# Altium schematic symbol library Altium_Lib_Haris.SchLib: 265 symbols (part 1 of 2)
Pins are listed as number, name and electrical type; pins without a type are passive.

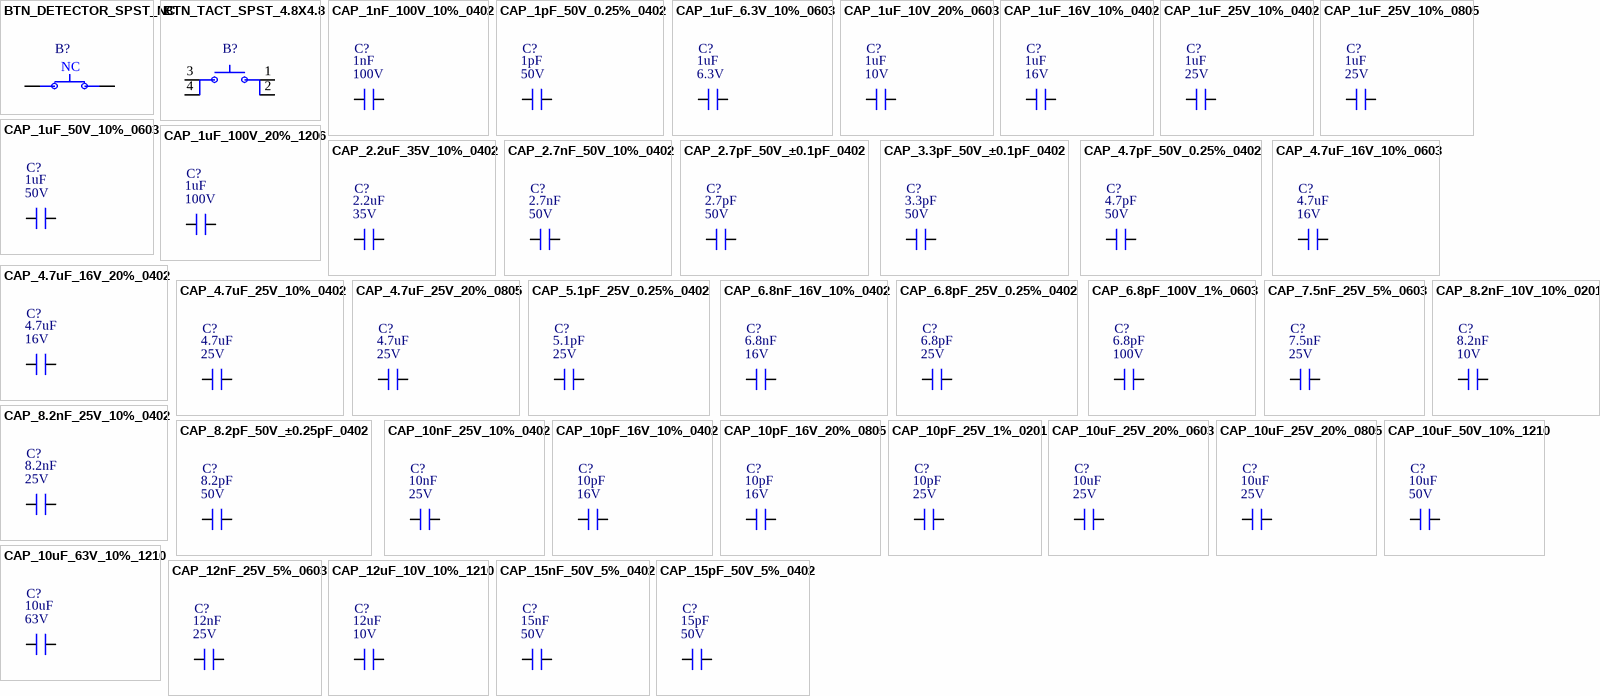
[diagram p0: symbols BTN_DETECTOR_SPST_NC to CAP_15pF_50V_5%_0402]

## BTN_DETECTOR_SPST_NC
designator B?, comment DTS 111 BBP T  (value not drawn)
DECTECTOR SWITCH, ON-OFF, TOP AC; Manufacturer: Knitter-Switch; Manufacturer Part Number: DTS 111 BBP T; Supplier: Digikey; Supplier Part Number: 3746-DTS111BBPTTR-ND
pins: 1, 2
text: NC

## BTN_TACT_SPST_4.8X4.8
designator B?, comment PTS526SK15SMTR2 LFS  (value not drawn)
Tactile Switch SPST-NO Top Actuated Surface Mount; Manufacturer: C&K; Manufacturer Part Number: PTS526SK15SMTR2 LFS; Supplier: Digikey; Supplier Part Number: CKN12221-2-ND; Case/Package: 5.20mm x 5.20mm
pins: 1, 2, 3, 4

## CAP_1nF_100V_10%_0402
designator C?, comment 1nF  Voltage: 100V
CAP CER 1000PF 100V X7R 0402; Manufacturer: Murata Electronics; Manufacturer Part Number: GRM155R72A102KA01D; Supplier: Digikey; Supplier Part Number: 490-6366-2-ND; Case/Package: 0402; Value: 1nF
footprint CAP_0402 (Ceramic Capacitor)
pins: 1, 2

## CAP_1pF_50V_0.25%_0402
designator C?, comment 1pF  Voltage: 50V
CAP CER 1PF 50V C0G/NP0 0402; Manufacturer: Murata Electronics; Manufacturer Part Number: GRM1555C1H1R0CA01D; Supplier: Digikey; Supplier Part Number: 490-3199-2-ND; Case/Package: 0402; Value: 1pF
footprint CAP_0402 (Ceramic Capacitor)
pins: 1, 2

## CAP_1uF_6.3V_10%_0603
designator C?, comment 1uF  Voltage: 6.3V
CAP CER 1UF 6.3V X5R 0603; Manufacturer: Murata Electronics; Manufacturer Part Number: GRM188R60J105KA01D; Supplier: Digikey; Supplier Part Number: 490-1550-2-ND; Case/Package: 0603; Value: 1uF
footprint CAP_0603 (Ceramic Capacitor)
pins: 1, 2

## CAP_1uF_10V_20%_0603
designator C?, comment 1uF  Voltage: 10V
CAP CER 1UF 10V Y5V 0603; Manufacturer: KEMET; Manufacturer Part Number: C0603C105Z8VACTU; Supplier: Digikey; Supplier Part Number: 399-C0603C105Z8VACTUTR-ND; Case/Package: 0603; Value: 1uF
footprint CAP_0603 (Ceramic Capacitor)
pins: 1, 2

## CAP_1uF_16V_10%_0402
designator C?, comment 1uF  Voltage: 16V
CAP CER 1UF 16V X5R 0402; Manufacturer: Samsung Electro-Mechanics; Manufacturer Part Number: CL05A105KO5NNNC; Supplier: Digikey; Supplier Part Number: 1276-1067-2-ND; Case/Package: 0402; Value: 1uF
footprint CAP_0402 (Ceramic Capacitor)
pins: 1, 2

## CAP_1uF_25V_10%_0402
designator C?, comment 1uF  Voltage: 25V
CAP CER 1UF 25V X5R 0402; Manufacturer: TDK; Manufacturer Part Number: C1005X5R1E105K050BC; Supplier: Digikey; Supplier Part Number: 445-9066-2-ND; Case/Package: 0402; Value: 1uF
footprint CAP_0402 (Ceramic Capacitor)
pins: 1, 2

## CAP_1uF_25V_10%_0805
designator C?, comment 1uF  Voltage: 25V
CAP CER 1UF 25V X7R 0805; Manufacturer: Murata Electronics; Manufacturer Part Number: GRM219R71E105KA88D; Supplier: Digikey; Supplier Part Number: 490-5899-2-ND; Case/Package: 0805; Value: 1uF
footprint CAP_0805 (Ceramic Capacitor)
pins: 1, 2

## CAP_1uF_50V_10%_0603
designator C?, comment 1uF  Voltage: 50V
CAP CER 1UF 50V X5R 0603; Manufacturer: TDK; Manufacturer Part Number: C1608X5R1H105K080AB; Supplier: Digikey; Supplier Part Number: 445-7468-2-ND; Case/Package: 0603; Value: 1uF
footprint CAP_0603 (Ceramic Capacitor)
pins: 1, 2

## CAP_1uF_100V_20%_1206
designator C?, comment 1uF  Voltage: 100V
CAP CER 1UF 100V X7R 1206; Manufacturer: TDK; Manufacturer Part Number: C3216X7R2A105M160AA; Supplier: Digikey; Supplier Part Number: 445-4468-2-ND; Case/Package: 1206; Value: 1uF
footprint CAP_1206 (Ceramic Capacitor)
pins: 1, 2

## CAP_2.2uF_35V_10%_0402
designator C?, comment 2.2uF  Voltage: 35V
CAP CER 2.2UF 35V X5R 0402; Manufacturer: TDK; Manufacturer Part Number: C1005X5R1V225K050BC; Supplier: Digikey; Supplier Part Number: 445-9028-2-ND; Case/Package: 0402; Value: 2.2uF
footprint CAP_0402 (Ceramic Capacitor)
pins: 1, 2

## CAP_2.7nF_50V_10%_0402
designator C?, comment 2.7nF  Voltage: 50V
CAP CER 2700PF 50V X7R 0402; Manufacturer: Murata Electronics; Manufacturer Part Number: GRM155R71H272KA01D; Supplier: Digikey; Supplier Part Number: 490-1306-2-ND; Case/Package: 0402; Value: 2.7nF
footprint CAP_0402 (Ceramic Capacitor)
pins: 1, 2

## CAP_2.7pF_50V_±0.1pF_0402
designator C?, comment 2.7pF  Voltage: 50V
CAP CER 2.7PF 50V C0G/NP0 0402; Manufacturer: Murata Electronics; Manufacturer Part Number: GJM1555C1H2R7BB01D; Supplier: Digikey; Supplier Part Number: 490-8094-2-ND; Case/Package: 0402; Value: 2.7pF
footprint CAP_0402 (Ceramic Capacitor)
pins: 1, 2

## CAP_3.3pF_50V_±0.1pF_0402
designator C?, comment 3.3pF  Voltage: 50V
CAP CER 3.3PF 50V C0G/NP0 0402; Manufacturer: Murata Electronics; Manufacturer Part Number: GJM1555C1H3R3BB01D; Supplier: Digikey; Supplier Part Number: 490-8097-2-ND; Case/Package: 0402; Value: 3.3pF
footprint CAP_0402 (Ceramic Capacitor)
pins: 1, 2

## CAP_4.7pF_50V_0.25%_0402
designator C?, comment 4.7pF  Voltage: 50V
CAP CER 4.7PF 50V C0G/NP0 0402; Manufacturer: Murata Electronics; Manufacturer Part Number: GJM1555C1H4R7CB01D; Supplier: Digikey; Supplier Part Number: 490-3100-2-ND; Case/Package: 0402; Value: 4.7pF
footprint CAP_0402 (Ceramic Capacitor)
pins: 1, 2

## CAP_4.7uF_16V_10%_0603
designator C?, comment 4.7uF  Voltage: 16V
CAP CER 4.7UF 16V X5R 0603; Manufacturer: TDK; Manufacturer Part Number: C1608X5R1C475K080AC; Supplier: Digikey; Supplier Part Number: 445-7478-2-ND; Case/Package: 0603; Value: 4.7uF
footprint BEAD_0603
pins: 1, 2

## CAP_4.7uF_16V_20%_0402
designator C?, comment 4.7uF  Voltage: 16V
CAP CER 4.7UF 16V X5R 0402; Manufacturer: Samsung Electro-Mechanics; Manufacturer Part Number: CL05A475MO5NUNC; Supplier: Digikey; Supplier Part Number: 1276-6836-2-ND; Case/Package: 0402; Value: 4.7uF
footprint CAP_0402 (Ceramic Capacitor)
pins: 1, 2

## CAP_4.7uF_25V_10%_0402
designator C?, comment 4.7uF  Voltage: 25V
CAP CER 4700PF 25V X7R 0402; Manufacturer: Murata Electronics; Manufacturer Part Number: GRM155R71E472KA01D; Supplier: Digikey; Supplier Part Number: 490-1309-2-ND; Case/Package: 0402; Value: 4.7uF
footprint CAP_0402 (Ceramic Capacitor)
pins: 1, 2

## CAP_4.7uF_25V_20%_0805
designator C?, comment 4.7uF  Voltage: 25V
CAP CER 4.7UF 25V X5R 0805; Manufacturer: Taiyo Yuden; Manufacturer Part Number: MSAST21GAB5475MTNA01; Supplier: Digikey; Supplier Part Number: 587-MSAST21GAB5475MTNA01TR-ND; Case/Package: 0805; Value: 4.7uF
footprint CAP_0805 (Ceramic Capacitor)
pins: 1, 2

## CAP_5.1pF_25V_0.25%_0402
designator C?, comment 5.1pF  Voltage: 25V
CAP CER 5.1PF 25V C0G/NP0 0402; Manufacturer: Murata Electronics; Manufacturer Part Number: GRM1555C1E5R1CA01D; Supplier: Digikey; Supplier Part Number: 490-11370-2-ND; Case/Package: 0402; Value: 5.1pF
footprint CAP_0402 (Ceramic Capacitor)
pins: 1, 2

## CAP_6.8nF_16V_10%_0402
designator C?, comment 6.8nF  Voltage: 16V
CAP CER 0402 6.8NF 16V X7R 10%; Manufacturer: KEMET; Manufacturer Part Number: C0402C682K4RECAUTO; Supplier: Digikey; Supplier Part Number: 399-C0402C682K4RECAUTOTR-ND; Case/Package: 0402; Value: 6.8nF
footprint CAP_0402 (Ceramic Capacitor)
pins: 1, 2

## CAP_6.8pF_25V_0.25%_0402
designator C?, comment 6.8pF  Voltage: 25V
CAP CER 6.8PF 25V C0G/NP0 0402; Manufacturer: Murata Electronics; Manufacturer Part Number: GRM1555C1E6R8CA01D; Supplier: Digikey; Supplier Part Number: 490-11371-2-ND; Case/Package: 0402; Value: 6.8pF
footprint CAP_0402 (Ceramic Capacitor)
pins: 1, 2

## CAP_6.8pF_100V_1%_0603
designator C?, comment 6.8pF  Voltage: 100V
CAP CER 6.8PF 100V NP0 0603; Manufacturer: KYOCERA AVX; Manufacturer Part Number: 06031U6R8BAT2A; Supplier: Digikey; Supplier Part Number: 478-KGQ15ACG2A6R8BTTR-ND; Case/Package: 0603; Value: 6.8pF
footprint CAP_0603 (Ceramic Capacitor)
pins: 1, 2

## CAP_7.5nF_25V_5%_0603
designator C?, comment 7.5nF  Voltage: 25V
CAP CER 7500PF 25V C0G/NP0 0603; Manufacturer: KEMET; Manufacturer Part Number: C0603C752J3GACTU; Supplier: Digikey; Supplier Part Number: 399-9980-2-ND; Case/Package: 0603; Value: 7.5nF
footprint CAP_0603 (Ceramic Capacitor)
pins: 1, 2

## CAP_8.2nF_10V_10%_0201
designator C?, comment 8.2nF  Voltage: 10V
CAP CER 8200PF 10V X7R 0201; Manufacturer: Murata Electronics; Manufacturer Part Number: GRM033R71A822KA01D; Supplier: Digikey; Supplier Part Number: 490-11356-2-ND; Case/Package: 0201; Value: 8.2nF
footprint CAP_0201 (Ceramic Capacitor)
pins: 1, 2

## CAP_8.2nF_25V_10%_0402
designator C?, comment 8.2nF  Voltage: 25V
CAP CER 8200PF 25V X7R 0402; Manufacturer: Murata Electronics; Manufacturer Part Number: GRM155R71E822KA01D; Supplier: Digikey; Supplier Part Number: 490-1311-2-ND; Case/Package: 0402; Value: 8.2nF
footprint CAP_0402 (Ceramic Capacitor)
pins: 1, 2

## CAP_8.2pF_50V_±0.25pF_0402
designator C?, comment 8.2pF  Voltage: 50V
CAP CER 8.2PF 50V C0G/NP0 0402; Manufacturer: Murata Electronics; Manufacturer Part Number: GJM1555C1H8R2CB01D; Supplier: Digikey; Supplier Part Number: 490-3110-2-ND; Case/Package: 0402; Value: 8.2pF
footprint CAP_0402 (Ceramic Capacitor)
pins: 1, 2

## CAP_10nF_25V_10%_0402
designator C?, comment 10nF  Voltage: 25V
CAP CER 0402 10NF 25V X7R 10%; Manufacturer: KEMET; Manufacturer Part Number: C0402C103K3REC7411; Supplier: Digikey; Supplier Part Number: 399-C0402C103K3REC7411TR-ND; Case/Package: 0402; Value: 10nF
footprint CAP_0402 (Ceramic Capacitor)
pins: 1, 2

## CAP_10pF_16V_10%_0402
designator C?, comment 10pF  Voltage: 16V
CAP CER 10PF 16V C0G/NPO 0402; Manufacturer: YAGEO; Manufacturer Part Number: CC0402KRNPO7BN100; Supplier: Digikey; Supplier Part Number: 311-3777-2-ND; Case/Package: 0402; Value: 10pF
footprint CAP_0402 (Ceramic Capacitor)
pins: 1, 2

## CAP_10pF_16V_20%_0805
designator C?, comment 10pF  Voltage: 16V
CAP CER 10PF 16V C0G/NP0 0805; Manufacturer: KEMET; Manufacturer Part Number: C0805C100M4GACTU; Supplier: Digikey; Supplier Part Number: 399-C0805C100M4GACTUCT-ND; Case/Package: 0805; Value: 10pF
footprint CAP_0805 (Ceramic Capacitor)
pins: 1, 2

## CAP_10pF_25V_1%_0201
designator C?, comment 10pF  Voltage: 25V
CAP CER 10PF 25V C0G/NP0 0201; Manufacturer: Murata Electronics; Manufacturer Part Number: GJM0335C1E100FB01D; Supplier: Digikey; Supplier Part Number: 490-GJM0335C1E100FB01DTR-ND; Case/Package: 0201; Value: 10pF
footprint CAP_0201 (Ceramic Capacitor)
pins: 1, 2

## CAP_10uF_25V_20%_0603
designator C?, comment 10uF  Voltage: 25V
CAP CER 10UF 25V X5R 0603; Manufacturer: Samsung Electro-Mechanics; Manufacturer Part Number: CL10A106MA8NRNC; Supplier: Digikey; Supplier Part Number: 1276-1869-2-ND; Case/Package: 0603; Value: 10uF
footprint CAP_0603 (Ceramic Capacitor)
pins: 1, 2

## CAP_10uF_25V_20%_0805
designator C?, comment 10uF  Voltage: 25V
CAP CER 10UF 25V X5R 0805; Manufacturer: Taiyo Yuden; Manufacturer Part Number: TMK212BBJ106MD-T; Supplier: Digikey; Supplier Part Number: 587-TMK212BBJ106MD-TTR-ND; Case/Package: 0805; Value: 10uF
footprint CAP_0805 (Ceramic Capacitor)
pins: 1, 2

## CAP_10uF_50V_10%_1210
designator C?, comment 10uF  Voltage: 50V
CAP CER 10UF 50V X5R 1210; Manufacturer: Taiyo Yuden; Manufacturer Part Number: MCASU32MSB5106KPNA01; Supplier: Digikey; Supplier Part Number: 587-MCASU32MSB5106KPNA01TR-ND; Case/Package: 1210; Value: 10uF
footprint CAP_1210 (Ceramic Capacitor)
pins: 1, 2

## CAP_10uF_63V_10%_1210
designator C?, comment 10uF  Voltage: 63V
CAP CER 10UF 63V X7R 1210; Manufacturer: Murata Electronics; Manufacturer Part Number: GRM32ER71J106KA12L; Supplier: Digikey; Supplier Part Number: 490-9970-2-ND; Case/Package: 1210; Value: 10uF
footprint CAP_1210 (Ceramic Capacitor)
pins: 1, 2

## CAP_12nF_25V_5%_0603
designator C?, comment 12nF  Voltage: 25V
CAP CER 0.012UF 25V C0G/NP0 0603; Manufacturer: KEMET; Manufacturer Part Number: C0603C123J3GACTU; Supplier: Digikey; Supplier Part Number: 399-C0603C123J3GACTUTR-ND; Case/Package: 0603; Value: 12nF
footprint CAP_0603 (Ceramic Capacitor)
pins: 1, 2

## CAP_12uF_10V_10%_1210
designator C?, comment 12uF  Voltage: 10V
CAP CER 12UF 10V X5R 1210; Manufacturer: KEMET; Manufacturer Part Number: C1210C126K8PACTU; Supplier: Digikey; Supplier Part Number: 399-C1210C126K8PACTUTR-ND; Case/Package: 1210; Value: 12uF
footprint CAP_1210 (Ceramic Capacitor)
pins: 1, 2

## CAP_15nF_50V_5%_0402
designator C?, comment 15nF  Voltage: 50V
CAP CER 0402 15NF 50V X7R 5%; Manufacturer: KEMET; Manufacturer Part Number: C0402C153J5RECTU; Supplier: Digikey; Supplier Part Number: 399-C0402C153J5RECTUTR-ND; Case/Package: 0402; Value: 15nF
footprint CAP_0402 (Ceramic Capacitor)
pins: 1, 2

## CAP_15pF_50V_5%_0402
designator C?, comment 15pF  Voltage: 50V
CAP CER 15PF 50V C0G/NP0 0402; Manufacturer: Murata Electronics; Manufacturer Part Number: GRM1555C1H150JA01D; Supplier: Digikey; Supplier Part Number: 490-5888-2-ND; Case/Package: 0402; Value: 15pF
footprint CAP_0402 (Ceramic Capacitor)
pins: 1, 2

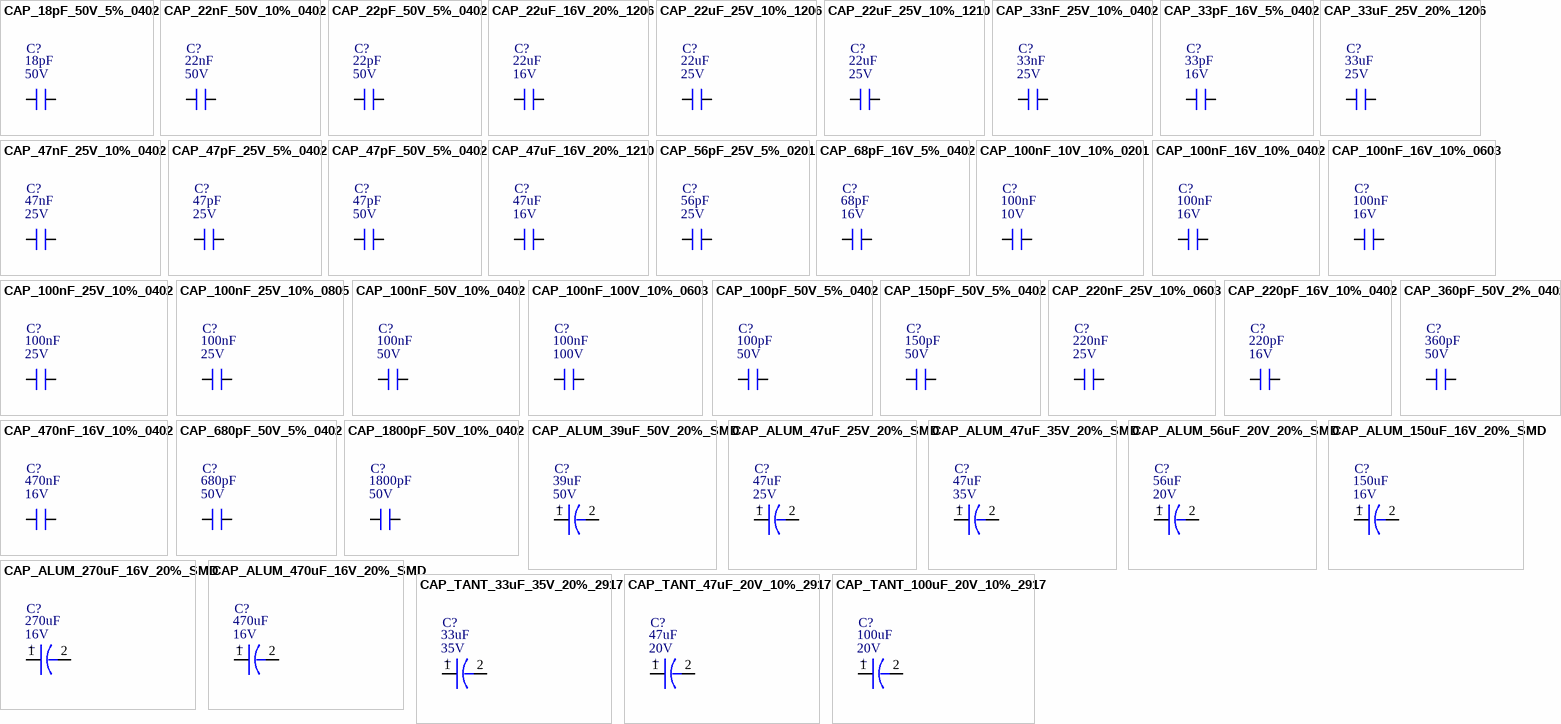
[diagram p1: symbols CAP_18pF_50V_5%_0402 to CAP_TANT_100uF_20V_10%_2917]

## CAP_18pF_50V_5%_0402
designator C?, comment 18pF  Voltage: 50V
CAP CER 18PF 50V C0G/NP0 0402; Manufacturer: Murata Electronics; Manufacturer Part Number: GRM1555C1H180JA01D; Supplier: Digikey; Supplier Part Number: 490-5858-2-ND; Case/Package: 0402; Value: 18pF
footprint CAP_0402 (Ceramic Capacitor)
pins: 1, 2

## CAP_22nF_50V_10%_0402
designator C?, comment 22nF  Voltage: 50V
CAP CER 0402 22NF 50V X7R 10%; Manufacturer: KEMET; Manufacturer Part Number: C0402C223K5REC7411; Supplier: Digikey; Supplier Part Number: 399-C0402C223K5REC7411TR-ND; Case/Package: 0402; Value: 22nF
footprint CAP_0402 (Ceramic Capacitor)
pins: 1, 2

## CAP_22pF_50V_5%_0402
designator C?, comment 22pF  Voltage: 50V
CAP CER 22PF 50V C0G/NP0 0402; Manufacturer: Murata Electronics; Manufacturer Part Number: GJM1555C1H220JB01D; Supplier: Digikey; Supplier Part Number: 490-14444-2-ND; Case/Package: 0402; Value: 22pF
footprint CAP_0402 (Ceramic Capacitor)
pins: 1, 2

## CAP_22uF_16V_20%_1206
designator C?, comment 22uF  Voltage: 16V
CAP CER 22UF 16V X5R 1206; Manufacturer: TDK; Manufacturer Part Number: C3216X5R1C226M160AB; Supplier: Digikey; Supplier Part Number: 445-6001-2-ND; Case/Package: 1206; Value: 22uF
footprint CAP_1206 (Ceramic Capacitor)
pins: 1, 2

## CAP_22uF_25V_10%_1206
designator C?, comment 22uF  Voltage: 25V
CAP CER 22UF 10V X7R 1206; Manufacturer: Murata Electronics; Manufacturer Part Number: GRM31CR71A226KE15L; Supplier: Digikey; Supplier Part Number: 490-5309-1-ND; Case/Package: 1206; Value: 22uF
footprint CAP_1206 (Ceramic Capacitor)
pins: 1, 2

## CAP_22uF_25V_10%_1210
designator C?, comment 22uF  Voltage: 25V
CAP CER 22UF 25V X5R 1210; Manufacturer: Murata Electronics; Manufacturer Part Number: GRM32ER61E226KE15L; Supplier: Digikey; Supplier Part Number: 490-3889-2-ND; Case/Package: 1210; Value: 22uF
footprint CAP_1210 (Ceramic Capacitor)
pins: 1, 2

## CAP_33nF_25V_10%_0402
designator C?, comment 33nF  Voltage: 25V
CAP CER 0.033UF 25V X7R 0402; Manufacturer: Murata Electronics; Manufacturer Part Number: GRM155R71E333KA88D; Supplier: Digikey; Supplier Part Number: 490-3253-2-ND; Case/Package: 0402; Value: 33nF
footprint CAP_0402 (Ceramic Capacitor)
pins: 1, 2

## CAP_33pF_16V_5%_0402
designator C?, comment 33pF  Voltage: 16V
CAP CER 33PF 16V X7R 0402; Manufacturer: KEMET; Manufacturer Part Number: C0402C330J4RACAUTO; Supplier: Digikey; Supplier Part Number: 399-13708-2-ND; Case/Package: 0402; Value: 33pF
footprint CAP_0402 (Ceramic Capacitor)
pins: 1, 2

## CAP_33uF_25V_20%_1206
designator C?, comment 33uF  Voltage: 25V
CAP CER 33UF 25V X5R 1206; Manufacturer: TDK; Manufacturer Part Number: C3216X5R1E336M160AC; Supplier: Digikey; Supplier Part Number: 445-8046-2-ND; Case/Package: 1206; Value: 33uF
footprint CAP_1206 (Ceramic Capacitor)
pins: 1, 2

## CAP_47nF_25V_10%_0402
designator C?, comment 47nF  Voltage: 25V
CAP CER 0.047UF 25V X7R 0402; Manufacturer: YAGEO; Manufacturer Part Number: CC0402KRX7R8BB473; Supplier: Digikey; Supplier Part Number: 311-1717-2-ND; Case/Package: 0402; Value: 47nF
footprint CAP_0402 (Ceramic Capacitor)
pins: 1, 2

## CAP_47pF_25V_5%_0402
designator C?, comment 47pF  Voltage: 25V
CAP CER 47PF 25V C0G/NP0 0402; Manufacturer: Murata Electronics; Manufacturer Part Number: GRM1555C1E470JA01D; Supplier: Digikey; Supplier Part Number: 490-10683-2-ND; Case/Package: 0402; Value: 47pF
footprint CAP_0402 (Ceramic Capacitor)
pins: 1, 2

## CAP_47pF_50V_5%_0402
designator C?, comment 47pF  Voltage: 50V
CAP CER 47PF 50V C0G/NP0 0402; Manufacturer: Murata Electronics; Manufacturer Part Number: GJM1555C1H470JB01D; Supplier: Digikey; Supplier Part Number: 490-14446-2-ND; Case/Package: 0402; Value: 47pF
footprint CAP_0402 (Ceramic Capacitor)
pins: 1, 2

## CAP_47uF_16V_20%_1210
designator C?, comment 47uF  Voltage: 16V
CAP CER 47UF 16V X5R 1210; Manufacturer: Murata Electronics; Manufacturer Part Number: GRM32ER61C476ME15L; Supplier: Digikey; Supplier Part Number: 490-3888-2-ND; Case/Package: 1210; Value: 47uF
footprint CAP_1210 (Ceramic Capacitor)
pins: 1, 2

## CAP_56pF_25V_5%_0201
designator C?, comment 56pF  Voltage: 25V
CAP CER 0.1UF 10V X5R 0201; Manufacturer: Murata Electronics; Manufacturer Part Number: GRM0335C1E560JA01D; Supplier: Digikey; Supplier Part Number: 490-3155-2-ND; Case/Package: 0201; Value: 56pF
footprint CAP_0201 (Ceramic Capacitor)
pins: 1, 2

## CAP_68pF_16V_5%_0402
designator C?, comment 68pF  Voltage: 16V
CAP CER 68PF 16V X8R 0402; Manufacturer: KEMET; Manufacturer Part Number: C0402C680J4HACTU; Supplier: Digikey; Supplier Part Number: 399-C0402C680J4HACTUTR-ND; Case/Package: 0402; Value: 68pF
footprint CAP_0402 (Ceramic Capacitor)
pins: 1, 2

## CAP_100nF_10V_10%_0201
designator C?, comment 100nF  Voltage: 10V
CAP CER 0.1UF 10V X5R 0201; Manufacturer: TDK; Manufacturer Part Number: C0603X5R1A104K030BC; Supplier: Digikey; Supplier Part Number: 445-7318-2-ND; Case/Package: 0201; Value: 100nF
footprint CAP_0201 (Ceramic Capacitor)
pins: 1, 2

## CAP_100nF_16V_10%_0402
designator C?, comment 100nF  Voltage: 16V
CAP CER 0.1UF 16V X7R 0402; Manufacturer: KEMET; Manufacturer Part Number: C0402C104K4RAC7411; Supplier: Digikey; Supplier Part Number: 399-C0402C104K4RAC7411TR-ND; Case/Package: 0402; Value: 100nF
footprint CAP_0402 (Ceramic Capacitor)
pins: 1, 2

## CAP_100nF_16V_10%_0603
designator C?, comment 100nF  Voltage: 16V
CAP CER 0.1UF 16V X7R 0603; Manufacturer: Taiyo Yuden; Manufacturer Part Number: EMK107B7104KA-T; Supplier: Digikey; Supplier Part Number: 587-1240-2-ND; Case/Package: 0603; Value: 100nF
footprint CAP_0603 (Ceramic Capacitor)
pins: 1, 2

## CAP_100nF_25V_10%_0402
designator C?, comment 100nF  Voltage: 25V
CAP CER 0.1UF 25V X5R 0402; Manufacturer: TDK; Manufacturer Part Number: C1005X5R1E104K050BC; Supplier: Digikey; Supplier Part Number: 445-4964-2-ND; Case/Package: 0402; Value: 100nF
footprint CAP_0402 (Ceramic Capacitor)
pins: 1, 2

## CAP_100nF_25V_10%_0805
designator C?, comment 100nF  Voltage: 25V
CAP CER 0.1UF 25V X7R 0805; Manufacturer: KYOCERA AVX; Manufacturer Part Number: KGM21NR71E104KT; Supplier: Digikey; Supplier Part Number: 478-KGM21NR71E104KTTR-ND; Case/Package: 0805; Value: 100nF
footprint CAP_0805 (Ceramic Capacitor)
pins: 1, 2

## CAP_100nF_50V_10%_0402
designator C?, comment 100nF  Voltage: 50V
CAP CER 0.1UF 50V X7R 0402; Manufacturer: Murata Electronics; Manufacturer Part Number: GRM155R71H104KE14D; Supplier: Digikey; Supplier Part Number: 490-10700-2-ND; Case/Package: 0402; Value: 100nF
footprint CAP_0402 (Ceramic Capacitor)
pins: 1, 2

## CAP_100nF_100V_10%_0603
designator C?, comment 100nF  Voltage: 100V
CAP CER 0.1UF 100V X7R 0603; Manufacturer: Murata Electronics; Manufacturer Part Number: GRM188R72A104KA35D; Supplier: Digikey; Supplier Part Number: 490-3285-2-ND; Case/Package: 0603; Value: 100nF
footprint CAP_0603 (Ceramic Capacitor)
pins: 1, 2

## CAP_100pF_50V_5%_0402
designator C?, comment 100pF  Voltage: 50V
CAP CER 100PF 50V C0G/NP0 0402; Manufacturer: KEMET; Manufacturer Part Number: C0402C101J5GACTU; Supplier: Digikey; Supplier Part Number: 399-C0402C101J5GACTUTR-ND; Case/Package: 0402; Value: 100pF
footprint CAP_0402 (Ceramic Capacitor)
pins: 1, 2

## CAP_150pF_50V_5%_0402
designator C?, comment 150pF  Voltage: 50V
CAP CER 150PF 50V C0G/NP0 0402; Manufacturer: Murata Electronics; Manufacturer Part Number: GRM1555C1H151JA01D; Supplier: Digikey; Supplier Part Number: 490-3229-2-ND; Case/Package: 0402; Value: 150pF
footprint CAP_0402 (Ceramic Capacitor)
pins: 1, 2

## CAP_220nF_25V_10%_0603
designator C?, comment 220nF  Voltage: 25V
CAP CER 0.22UF 25V X5R 0603; Manufacturer: TDK; Manufacturer Part Number: C1608X5R1E224K080AA; Supplier: Digikey; Supplier Part Number: 445-5140-2-ND; Case/Package: 0603; Value: 220nF
footprint CAP_0603 (Ceramic Capacitor)
pins: 1, 2

## CAP_220pF_16V_10%_0402
designator C?, comment 220pF  Voltage: 16V
CAP CER 220PF 16V X7R 0402; Manufacturer: KEMET; Manufacturer Part Number: C0402C221K4RACTU; Supplier: Digikey; Supplier Part Number: 399-14431-2-ND; Case/Package: 0402; Value: 220pF
footprint CAP_0402 (Ceramic Capacitor)
pins: 1, 2

## CAP_360pF_50V_2%_0402
designator C?, comment 360pF  Voltage: 50V
CAP CER 360PF 50V C0G/NP0 0402; Manufacturer: Murata Electronics; Manufacturer Part Number: GRM1555C1H361GA01D; Supplier: Digikey; Supplier Part Number: 490-8201-2-ND; Case/Package: 0402; Value: 360pF
footprint CAP_0402 (Ceramic Capacitor)
pins: 1, 2

## CAP_470nF_16V_10%_0402
designator C?, comment 470nF  Voltage: 16V
CAP CER 0.47UF 16V X5R 0402; Manufacturer: Murata Electronics; Manufacturer Part Number: GRM155R61C474KE01D; Supplier: Digikey; Supplier Part Number: 490-13421-2-ND; Case/Package: 0402; Value: 470nF
footprint CAP_0402 (Ceramic Capacitor)
pins: 1, 2

## CAP_680pF_50V_5%_0402
designator C?, comment 680pF  Voltage: 50V
CAP CER 680PF 50V C0G/NP0 0402; Manufacturer: Murata Electronics; Manufacturer Part Number: GRM1555C1H681JA01D; Supplier: Digikey; Supplier Part Number: 490-3240-2-ND; Case/Package: 0402; Value: 680pF
footprint CAP_0402 (Ceramic Capacitor)
pins: 1, 2

## CAP_1800pF_50V_10%_0402
designator C?, comment 1800pF  Voltage: 50V
CAP CER 1800PF 50V X7R 0402; Manufacturer: Murata Electronics; Manufacturer Part Number: GRM155R71H182KA01D; Supplier: Digikey; Supplier Part Number: 490-3246-2-ND; Case/Package: 0402; Value: 1800pF
footprint CAP_0402 (Ceramic Capacitor)
pins: 1, 2

## CAP_ALUM_39uF_50V_20%_SMD
designator C?, comment 39uF  Voltage: 50V
CAP ALUM POLY 39UF 20% 50V SMD; Manufacturer: Panasonic Industry; Manufacturer Part Number: 50SVPF39M; Supplier: Digikey; Supplier Part Number: P16593TR-ND; Case/Package: SMD,8.3x8.3; Value: 39uF
footprint CAP_50SVPF39M
pins: 1, 2
text: +

## CAP_ALUM_47uF_25V_20%_SMD
designator C?, comment 47uF  Voltage: 25V
CAP ALUM POLY 47UF 20% 25V SMD; Manufacturer: Panasonic Industry; Manufacturer Part Number: 25SVPF47M; Supplier: Digikey; Supplier Part Number: P16513TR-ND; Case/Package: SMD,6.6X6.6; Value: 47uF
footprint CAP_25SVPF47M
pins: 1, 2
text: +

## CAP_ALUM_47uF_35V_20%_SMD
designator C?, comment 47uF  Voltage: 35V
CAP ALUM HYBRID 47UF 20% 35V SMD; Manufacturer: Panasonic Industry; Manufacturer Part Number: EEH-ZC1V470P; Supplier: Digikey; Supplier Part Number: P15473TR-ND; Case/Package: SMD,6.6X6.6; Value: 47uF
footprint CAP_25SVPF47M
pins: 1, 2
text: +

## CAP_ALUM_56uF_20V_20%_SMD
designator C?, comment 56uF  Voltage: 20V
CAP ALUM POLY 56UF 20% 20V SMD; Manufacturer: Panasonic Industry; Manufacturer Part Number: 20SVPF56MX; Supplier: Digikey; Supplier Part Number: P16502TR-ND; Case/Package: SMD,5.3x5.3; Value: 56uF
footprint CAP_20SVPF56MX
pins: 1, 2
text: +

## CAP_ALUM_150uF_16V_20%_SMD
designator C?, comment 150uF  Voltage: 16V
CAP ALUM POLY 150UF 20% 16V SMD; Manufacturer: Nichicon; Manufacturer Part Number: RHA1C151MCN1GS; Supplier: Digikey; Supplier Part Number: 493-3776-2-ND; Case/Package: SMD,8.3x8.3; Value: 150uF
footprint CAP_RHAHS_8X6P7_NCH
pins: 1, 2
text: +

## CAP_ALUM_270uF_16V_20%_SMD
designator C?, comment 270uF  Voltage: 16V
CAP ALUM POLY 270UF 20% 16V SMD; Manufacturer: Panasonic Industry; Manufacturer Part Number: 16SVPG270M; Supplier: Digikey; Supplier Part Number: PCE5081TR-ND; Case/Package: SMD,6.6x6.6; Value: 270uF
footprint CAP_16SVPG270M
pins: 1, 2
text: +

## CAP_ALUM_470uF_16V_20%_SMD
designator C?, comment 470uF  Voltage: 16V
CAP ALUM 470uF 16V POLAR; Manufacturer: Nichicon; Manufacturer Part Number: UCV1C471MCL1GS; Supplier: Digikey; Supplier Part Number: UCV1C471MCL1GTR-ND; Case/Package: SMD,6.6x6.6; Value: 470uF
pins: 1, 2
text: +

## CAP_TANT_33uF_35V_20%_2917
designator C?, comment 33uF  Voltage: 35V
CAP TANT POLY 33UF 35V 2917; Manufacturer: KEMET; Manufacturer Part Number: T521D336M035ATE065; Supplier: Digikey; Supplier Part Number: 399-9786-2-ND; Case/Package: 2917; Value: 33uF
footprint CAP_TANT_2917
pins: 1, 2
text: +

## CAP_TANT_47uF_20V_10%_2917
designator C?, comment 47uF  Voltage: 20V
CAP TANT 47UF 10% 20V 2917; Manufacturer: Vishay Sprague; Manufacturer Part Number: 293D476X9020D2TE3; Supplier: Digikey; Supplier Part Number: 718-1091-2-ND; Case/Package: 2917; Value: 47uF
footprint CAP_TANT_2917
pins: 1, 2
text: +

## CAP_TANT_100uF_20V_10%_2917
designator C?, comment 100uF  Voltage: 20V
CAP TANT 100UF 10% 20V 2917; Manufacturer: KYOCERA AVX; Manufacturer Part Number: TAJD107K020RNJV; Supplier: Digikey; Supplier Part Number: 478-TAJD107K020RNJVTR-ND; Case/Package: 2917; Value: 100uF
footprint CAP_TANT_2917
pins: 1, 2
text: +

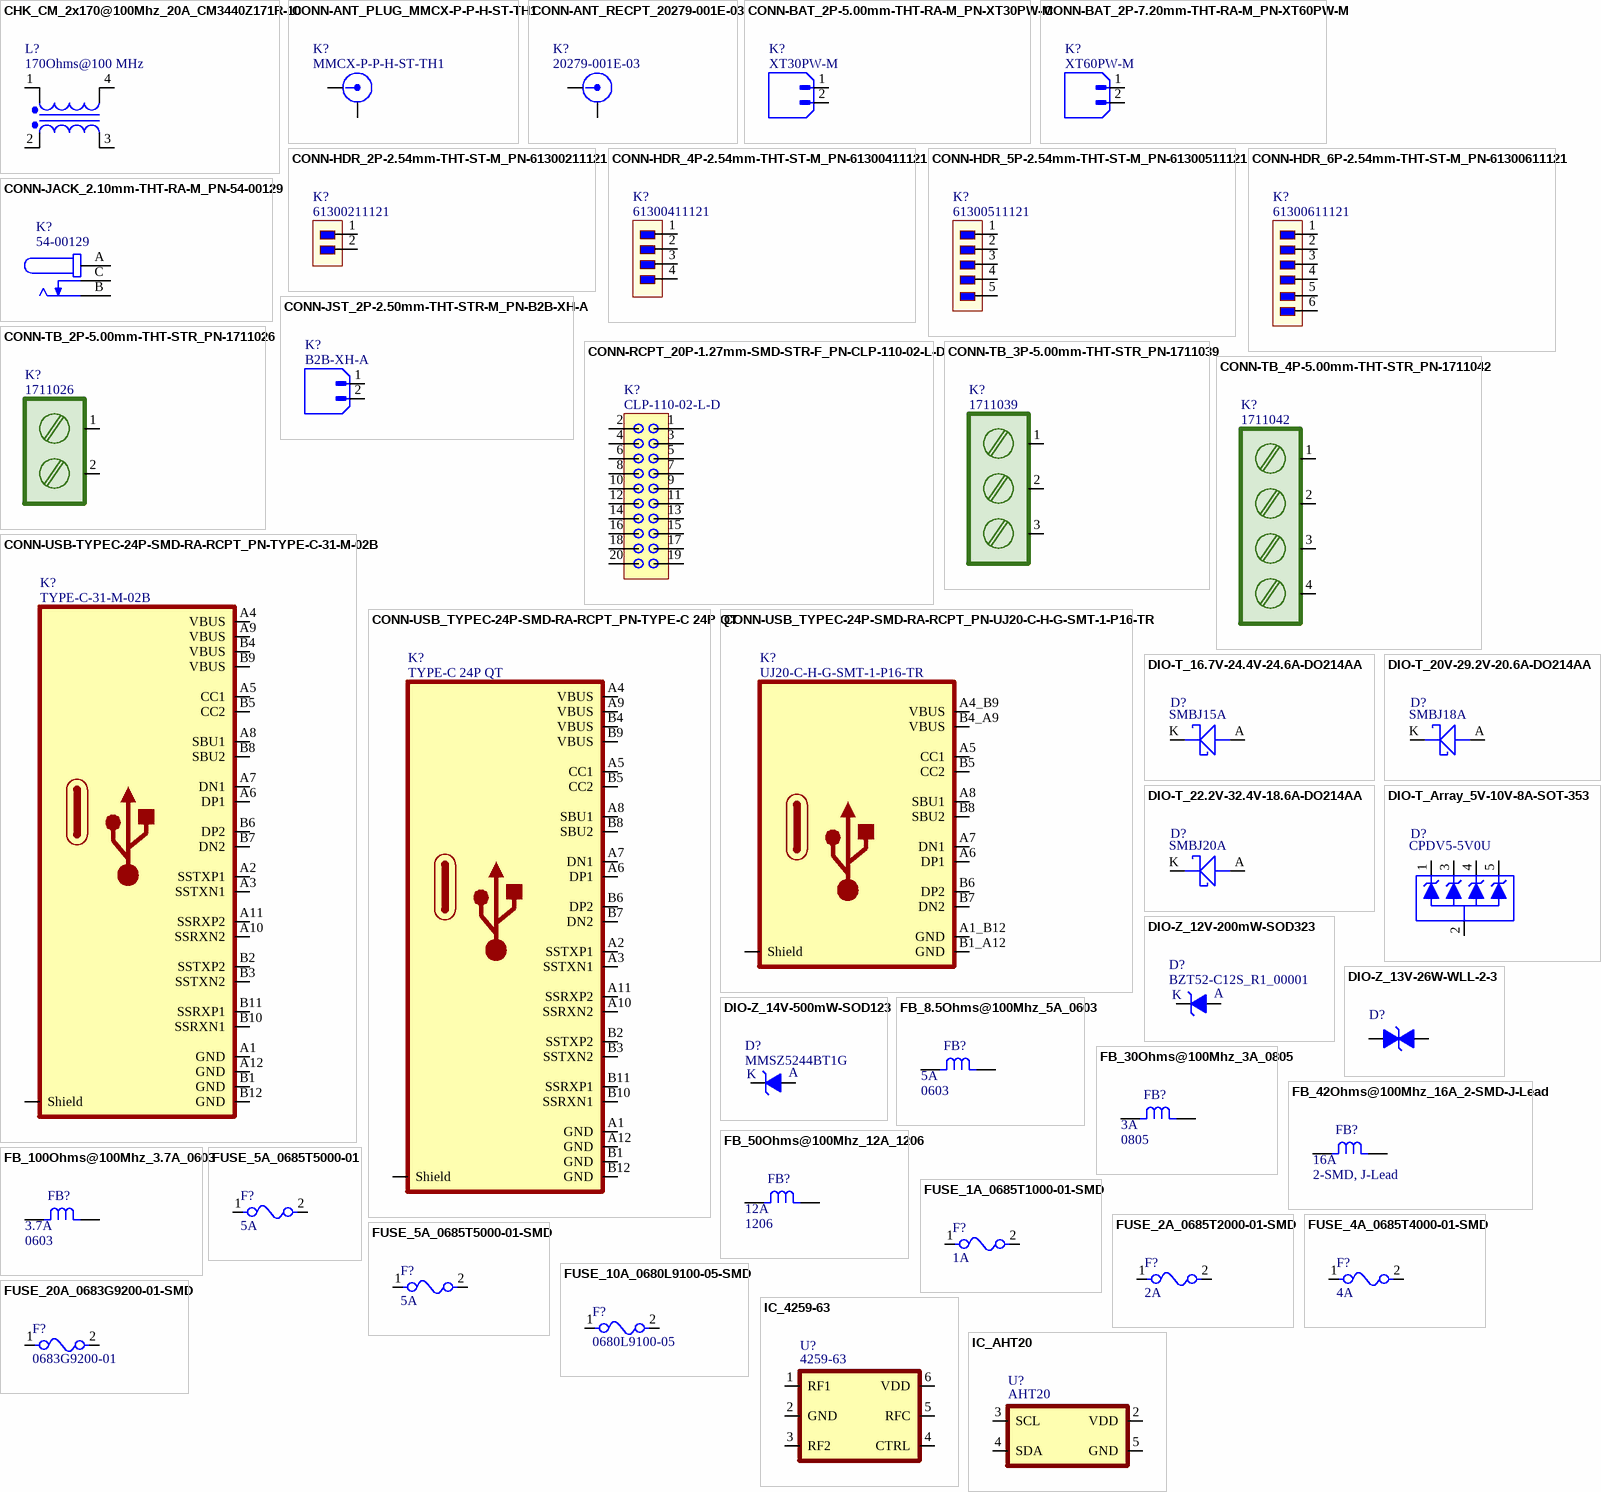
[diagram p2: symbols CHK_CM_2x170@100Mhz_20A_CM3440Z171R-10 to IC_AHT20]

## CHK_CM_2x170@100Mhz_20A_CM3440Z171R-10
designator L?, comment value 170Ohms@100 MHz  (hidden comment: CM3440Z171R-10)
2 Line Common Mode Choke Surface Mount 170 Ohms @ 100 MHz 20A DCR 1mOhm; Manufacturer: Laird-Signal Integrity Products; Manufacturer Part Number: CM3440Z171R-10; Supplier: Digikey; Supplier Part Number: 240-2463-2-ND; Case/Package: Vertical, 4 Flat Lead
footprint FIL_CM3440Z171R-10
pins: 1, 2, 3, 4

## CONN-ANT_PLUG_MMCX-P-P-H-ST-TH1
designator K?, comment MMCX-P-P-H-ST-TH1
MMCX Connector Plug, Male Pin 50 Ohms Through Hole Solder; Manufacturer: Samtec Inc.; Manufacturer Part Number: MMCX-P-P-H-ST-TH1; Supplier: DigiKey; Supplier Part Number: SAM10618-ND
pins: 1, 2

## CONN-ANT_RECPT_20279-001E-03
designator K?, comment 20279-001E-03
U.FL (UMCC), I-PEX MHFI Connector Receptacle, Male Pin 50 Ohms Surface Mount Solder; Manufacturer: I-PEX; Manufacturer Part Number: 20279-001E-03; Supplier: DigiKey; Supplier Part Number: 5378-20279-001E-03TR-ND
pins: 1, 2

## CONN-BAT_2P-5.00mm-THT-RA-M_PN-XT30PW-M
designator K?, comment XT30PW-M
DC supply; socket; male; XT30; 15A; 500V; PIN: 2; on PCBs; Manufacturer: AMASS; Manufacturer Part Number: XT30PW-M; Supplier: TEM; Supplier Part Number: XT30PW-M; Case/Package: 2x1, 5mm, RA; ComponentLink1Description: Datasheet; ComponentLink1URL: https://www.tme.eu/Document/6eb2005a51a52592b3f19e8a450c54c8/XT30PW-M.pdf
footprint CON_XT30PW-M
pins: 1 P (power), 2 N (power)

## CONN-BAT_2P-7.20mm-THT-RA-M_PN-XT60PW-M
designator K?, comment XT60PW-M
DC supply; socket; male; XT60; 30A; 500V; PIN: 2; on PCBs; Manufacturer: AMASS; Manufacturer Part Number: XT60PW-M; Supplier: TME; Supplier Part Number: XT60PW-M; Case/Package: 2x1, 7.2mm, RA
footprint CONN-TH_XT60PW-M
pins: 1 P (power), 2 N (power)

## CONN-HDR_2P-2.54mm-THT-ST-M_PN-61300211121
designator K?, comment 61300211121
CONN HEADER VERT 2POS 2.54MM; Manufacturer: Würth Elektronik; Manufacturer Part Number: 61300211121; Supplier: Digikey; Supplier Part Number: 732-5315-ND; Case/Package: 2x1, 2.54mm, ST
pins: 1 0, 2

## CONN-HDR_4P-2.54mm-THT-ST-M_PN-61300411121
designator K?, comment 61300411121
CONN HEADER VERT 4POS 2.54MM; Manufacturer: Würth Elektronik; Manufacturer Part Number: 61300411121; Supplier: Digikey; Supplier Part Number: 732-5317-ND; Case/Package: 4x1, 2.54mm, ST
pins: 1 0, 2, 3, 4

## CONN-HDR_5P-2.54mm-THT-ST-M_PN-61300511121
designator K?, comment 61300511121
CONN HEADER VERT 5POS 2.54MM; Manufacturer: Würth Elektronik; Manufacturer Part Number: 61300511121; Supplier: Digikey; Supplier Part Number: 732-5318-ND; Case/Package: 5x1, 2.54mm, ST
pins: 1 0, 2, 3, 4, 5

## CONN-HDR_6P-2.54mm-THT-ST-M_PN-61300611121
designator K?, comment 61300611121
CONN HEADER VERT 6POS 2.54MM; Manufacturer: Würth Elektronik; Manufacturer Part Number: 61300611121; Supplier: Digikey; Supplier Part Number: 732-5319-ND; Case/Package: 6x1, 2.54mm, ST
pins: 1 0, 2, 3, 4, 5, 6

## CONN-JACK_2.10mm-THT-RA-M_PN-54-00129
designator K?, comment 54-00129
Power Barrel Connector Jack 2.10mm ID (0.083"), 5.50mm OD (0.217") Through Hole, Right Angle; Manufacturer: Tensility; Manufacturer Part Number: 54-00129; Supplier: Digikey/Mouser; Supplier Part Number: 839-54-00129-ND; Case/Package: 2.10mm ID (0.083"), 5.50mm OD (0.217")
footprint TENSILITY_54-00129
pins: A, B, C

## CONN-JST_2P-2.50mm-THT-STR-M_PN-B2B-XH-A
designator K?, comment B2B-XH-A
Connector Header Through Hole 2 position 0.098" (2.50mm); Manufacturer: JST Sales America Inc.; Manufacturer Part Number: B2B-XH-A; Supplier: Digikey; Supplier Part Number: 455-B2B-XH-A-ND; Case/Package: 2x1, 2.5mm, ST; ComponentLink1Description: Datasheet; ComponentLink1URL: https://www.jst-mfg.com/product/pdf/eng/eXH.pdf
footprint CON_JST_B2B-XH-A
pins: 1 P (power), 2 N (power)

## CONN-RCPT_20P-1.27mm-SMD-STR-F_PN-CLP-110-02-L-D
designator K?, comment CLP-110-02-L-D
20 Position Receptacle Connector 0.050" (1.27mm) Surface Mount Gold; Manufacturer: Samtec Inc.; Manufacturer Part Number: CLP-110-02-L-D; Supplier: Digikey; Supplier Part Number: 612-CLP-110-02-L-D-ND; Case/Package: 10x2, 1.27mm, ST
pins: 1, 2, 3, 4, 5, 6, 7, 8, 9, 10, 11, 12, 13, 14, 15, 16, 17, 18, 19, 20

## CONN-TB_2P-5.00mm-THT-STR_PN-1711026
designator K?, comment 1711026
TERM BLK 2POS SIDE ENTRY 5MM PCB; Manufacturer: Phoenix Contact; Manufacturer Part Number: 1711026; Supplier: Digikey; Supplier Part Number: 277-1022-ND; Case/Package: TH/5.00MM
footprint PHOENIX_1711026
pins: 1, 2

## CONN-TB_3P-5.00mm-THT-STR_PN-1711039
designator K?, comment 1711039
TERM BLK 3POS SIDE ENTRY 5MM PCB; Manufacturer: Phoenix Contact; Manufacturer Part Number: 1711039; Supplier: Digikey; Supplier Part Number: 277-1023-ND; Case/Package: TH/5.00MM
footprint PHOENIX_1711039
pins: 1, 2, 3

## CONN-TB_4P-5.00mm-THT-STR_PN-1711042
designator K?, comment 1711042
TERM BLK 4POS SIDE ENTRY 5MM PCB; Manufacturer: Phoenix Contact; Manufacturer Part Number: 1711042; Supplier: Digikey; Supplier Part Number: 277-1024-ND; Case/Package: TH/5.00MM
footprint PHOENIX_1711042
pins: 1, 2, 3, 4

## CONN-USB-TYPEC-24P-SMD-RA-RCPT_PN-TYPE-C-31-M-02B
designator K?, comment TYPE-C-31-M-02B
CONN RCPT Type-C 24POS SMD R/A; Manufacturer: Korean Hroparts Elec; Manufacturer Part Number: TYPE-C-31-M-02B; Supplier: LCSC; Supplier Part Number: C2909198; Case/Package: Type-C 24 Pos
footprint CON_TYPE-C-31-M-02B
pins: A1 GND, A2 SSTXP1, A3 SSTXN1, A4 VBUS, A5 CC1, A6 DP1, A7 DN1, A8 SBU1, A9 VBUS, A10 SSRXN2, A11 SSRXP2, A12 GND, B1 GND, B2 SSTXP2, B3 SSTXN2, B4 VBUS, B5 CC2, B6 DP2, B7 DN2, B8 SBU2, B9 VBUS, B10 SSRXN1, B11 SSRXP1, B12 GND, Shield

## CONN-USB_TYPEC-24P-SMD-RA-RCPT_PN-TYPE-C 24P QT
designator K?, comment TYPE-C 24P QT
CONN RCPT USB 3.1 Type-C 24POS SMD R/A; Manufacturer: SHOU HAN; Manufacturer Part Number: TYPE-C 24P QT; Supplier: LCSC; Supplier Part Number: C2681555; Case/Package: Type-C 24 Pos
footprint CON_TYPE-C-24P-QT_SMD
pins: A1 GND, A2 SSTXP1, A3 SSTXN1, A4 VBUS, A5 CC1, A6 DP1, A7 DN1, A8 SBU1, A9 VBUS, A10 SSRXN2, A11 SSRXP2, A12 GND, B1 GND, B2 SSTXP2, B3 SSTXN2, B4 VBUS, B5 CC2, B6 DP2, B7 DN2, B8 SBU2, B9 VBUS, B10 SSRXN1, B11 SSRXP1, B12 GND, Shield

## CONN-USB_TYPEC-24P-SMD-RA-RCPT_PN-UJ20-C-H-G-SMT-1-P16-TR
designator K?, comment UJ20-C-H-G-SMT-1-P16-TR
USB-C (USB TYPE-C) USB 2.0 Receptacle Connector 24 (16+8 Dummy) Position Surface Mount, Right Angle; Through Hole; Manufacturer: Same Sky (Formerly CUI Devices); Manufacturer Part Number: UJ20-C-H-G-SMT-1-P16-TR; Supplier: Digikey; Supplier Part Number: 2223-UJ20-C-H-G-SMT-1-P16-TR-ND; Case/Package: Type-C 24 Pos
footprint CON_UJ20-C-H-G-SMT-1-P16-TR
pins: A1_B12 GND, A4_B9 VBUS, A5 CC1, A6 DP1, A7 DN1, A8 SBU1, B1_A12 GND, B4_A9 VBUS, B5 CC2, B6 DP2, B7 DN2, B8 SBU2, Shield

## DIO-T_16.7V-24.4V-24.6A-DO214AA
designator D?, comment SMBJ15A
24.4V Clamp 24.6A Ipp Tvs Diode Surface Mount DO-214AA (SMBJ); Manufacturer: Littelfuse Inc.; Manufacturer Part Number: SMBJ15A; Case/Package: DO214AA; Supplier: Digikey; Supplier Part Number: SMBJ15ALFTR-ND; ComponentLink1Description: Datasheet; ComponentLink1URL: https://www.littelfuse.com/assetdocs/tvs-diodes-smbj-series-datasheet?assetguid=ba555e99-a12d-4f72-a0b6-86b06c67171e
footprint DIO_SMB_DO-214AA (Diode)
pins: A, K

## DIO-T_20V-29.2V-20.6A-DO214AA
designator D?, comment SMBJ18A
29.2V Clamp 20.6A Ipp Tvs Diode Surface Mount DO-214AA (SMBJ); Manufacturer: Littelfuse Inc.; Manufacturer Part Number: SMBJ18A; Case/Package: DO214AA; Supplier: Digikey; Supplier Part Number: SMBJ18ALFTR-ND
footprint DIO_SMB_DO-214AA (Diode)
pins: A, K

## DIO-T_22.2V-32.4V-18.6A-DO214AA
designator D?, comment SMBJ20A
32.4V Clamp 18.6A Ipp Tvs Diode Surface Mount DO-214AA (SMBJ); Manufacturer: Littelfuse Inc.; Manufacturer Part Number: SMBJ20A; Case/Package: DO214AA; Supplier: Digikey; Supplier Part Number: SMBJ20ALFTR-ND
footprint DIO_SMB_DO-214AA (Diode)
pins: A, K

## DIO-T_Array_5V-10V-8A-SOT-353
designator D?, comment CPDV5-5V0U
10V Clamp 8A (8/20µs) Ipp Tvs Diode Surface Mount SOT-353; Manufacturer: Comchip Technology; Manufacturer Part Number: CPDV5-5V0U; Case/Package: SOT353; Supplier: Digikey; Supplier Part Number: 641-1301-2-ND
pins: 1, 2, 3, 4, 5

## DIO-Z_12V-200mW-SOD323
designator D?, comment BZT52-C12S_R1_00001
Zener Diode 12 V 200 mW ±5% Surface Mount SOD-323; Manufacturer: Panjit International Inc.; Manufacturer Part Number: BZT52-C12S_R1_00001; Case/Package: SOD323; Supplier: Digikey; Supplier Part Number: 3757-BZT52-C12S_R1_00001TR-ND
footprint DIO_SOD-323F (Diode)
pins: A, K

## DIO-Z_13V-26W-WLL-2-3
designator D?, comment ESD131B1W0201E6327XTSA1  (value not drawn)
13V Clamp 3.5A (8/20µs) Ipp Tvs Diode Surface Mount WLL-2-3; Manufacturer: Infineon Technologies; Manufacturer Part Number: ESD131B1W0201E6327XTSA1; Case/Package: WLL-2-3; Supplier: Digikey; Supplier Part Number: ESD131B1W0201E6327XTSA1TR-ND
pins: 1, 2

## DIO-Z_14V-500mW-SOD123
designator D?, comment MMSZ5244BT1G
Zener Diode 14 V 500 mW ±5% Surface Mount SOD-123; Manufacturer: onsemi; Manufacturer Part Number: MMSZ5244BT1G; Case/Package: SOD123; Supplier: Digikey; Supplier Part Number: MMSZ5244BT1GOSTR-ND; ComponentLink1Description: Datasheet; ComponentLink1URL: https://www.onsemi.com/pdf/datasheet/mmsz5221bt1-d.pdf
footprint DIO_SOD-123 (DIODE GEN PURP)
pins: A, K

## FB_8.5Ohms@100Mhz_5A_0603
designator FB?, comment value 5A  Case/Package: 0603  (hidden comment: BLE18PS080BH1D)
8.5 Ohms @ 100 MHz 1 Power Line Ferrite Bead 0603 (1608 Metric) 5A 4mOhm; Manufacturer: Murata Electronics; Manufacturer Part Number: BLE18PS080BH1D; Supplier: Digikey; Supplier Part Number: 490-BLE18PS080BH1DTR-ND
footprint BEAD_0603
pins: 1, 2

## FB_30Ohms@100Mhz_3A_0805
designator FB?, comment value 3A  Case/Package: 0805  (hidden comment: XFEB201209-300-3A)
30 Ohms @ 100 MHz 1 Ferrite Bead 0805 (2012 Metric) 3A 15mOhm; Manufacturer: XFMRS; Manufacturer Part Number: XFEB201209-300-3A; Supplier: Digikey; Supplier Part Number: 2840-XFEB201209-300-3ATR-ND
footprint BEAD_0805
pins: 1, 2

## FB_42Ohms@100Mhz_16A_2-SMD-J-Lead
designator FB?, comment value 16A  Case/Package: 2-SMD, J-Lead  (hidden comment: 7427930)
42 Ohms 1 Ferrite Bead 2-SMD, J-Lead 16A 0.6mOhm; Manufacturer: Würth Elektronik; Manufacturer Part Number: 7427930; Supplier: Digikey; Supplier Part Number: 732-2376-2-ND
footprint BEAD_2-SMD (J-Lead)
pins: 1, 2

## FB_50Ohms@100Mhz_12A_1206
designator FB?, comment value 12A  Case/Package: 1206  (hidden comment: BLM31SN500SN1L)
50 Ohms @ 100 MHz 1 Power Line Ferrite Bead 1206 (3216 Metric) 12A 1.6mOhm; Manufacturer: Murata Electronics; Manufacturer Part Number: BLM31SN500SN1L; Supplier: Digikey; Supplier Part Number: 490-13269-2-ND
footprint BEAD_1206
pins: 1, 2

## FB_100Ohms@100Mhz_3.7A_0603
designator FB?, comment value 3.7A  Case/Package: 0603  (hidden comment: BLM18SP101SN1D)
100 Ohms @ 100 MHz 1 Power Line Ferrite Bead 0603 (1608 Metric) 3.7A 22mOhm; Manufacturer: Murata Electronics; Manufacturer Part Number: BLM18SP101SN1D; Supplier: Digikey; Supplier Part Number: 490-BLM18SP101SN1DTR-ND
footprint BEAD_0603
pins: 1, 2

## FUSE_1A_0685T1000-01-SMD
designator F?, comment 1A
1 A 63 V 63 V Fuse Board Mount (Cartridge Style Excluded) Surface Mount 1206 (3216 Metric); Manufacturer: Bel Fuse Inc.; Manufacturer Part Number: 0685T1000-01; Case/Package: 1206; Supplier: Digikey; Supplier Part Number: 5923-0685T1000-01TR-ND
footprint FUSC1206
pins: 1, 2

## FUSE_2A_0685T2000-01-SMD
designator F?, comment 2A
2 A 63 V 63 V Fuse Board Mount (Cartridge Style Excluded) Surface Mount 1206 (3216 Metric); Manufacturer: Bel Fuse Inc.; Manufacturer Part Number: 0685T2000-01; Case/Package: 1206; Supplier: Digikey; Supplier Part Number: 5923-0685T2000-01TR-ND
footprint FUSC1206
pins: 1, 2

## FUSE_4A_0685T4000-01-SMD
designator F?, comment 4A
4 A 63 V 63 V Fuse Board Mount (Cartridge Style Excluded) Surface Mount 1206 (3216 Metric); Manufacturer: Bel Fuse Inc.; Manufacturer Part Number: 0685T4000-01; Case/Package: 1206; Supplier: Digikey; Supplier Part Number: 5923-0685T4000-01TR-ND
footprint FUSC1206
pins: 1, 2

## FUSE_5A_0685T5000-01
designator F?, comment 5A
5 A 63 V 63 V Fuse Board Mount (Cartridge Style Excluded) Surface Mount 1206 (3216 Metric); Manufacturer: Bel Fuse Inc.; Manufacturer Part Number: 0685T5000-01; Case/Package: 1206; Supplier: Digikey; Supplier Part Number: 5923-0685T5000-01TR-ND
footprint FUSC1206
pins: 1, 2

## FUSE_5A_0685T5000-01-SMD
designator F?, comment 5A
5 A 63 V 63 V Fuse Board Mount (Cartridge Style Excluded) Surface Mount 1206 (3216 Metric); Manufacturer: Bel Fuse Inc.; Manufacturer Part Number: 0685T5000-01; Case/Package: 1206; Supplier: Digikey; Supplier Part Number: 5923-0685T5000-01TR-ND
footprint FUSC1206
pins: 1, 2

## FUSE_10A_0680L9100-05-SMD
designator F?, comment 0680L9100-05
10 A 50 V 75 V Fuse Board Mount (Cartridge Style Excluded) Surface Mount 2-SMD, Square End Block; Manufacturer: Bel Fuse Inc.; Manufacturer Part Number: 0680L9100-05; Case/Package: 2-SMD, Square End Block; Supplier: Digikey; Supplier Part Number: 5923-0680L9100-05TR-ND; ComponentLink1Description: Datasheet; ComponentLink1URL: https://www.belfuse.com/media/datasheets/products/circuit-protection/ds-CP-0680L-series.pdf
footprint FUSC6125X279N
pins: 1, 2

## FUSE_20A_0683G9200-01-SMD
designator F?, comment 0683G9200-01
20 A 350 V 125 V Fuse Cartridge, Ceramic Surface Mount 2-SMD, Square End Block; Manufacturer: Bel Fuse Inc.; Manufacturer Part Number: 0683G9200-01; Case/Package: 2-SMD, Square End Block; Supplier: Digikey; Supplier Part Number: 5923-0683G9200-01TR-ND
footprint FUSC1205X465N
pins: 1, 2

## IC_4259-63
designator U?, comment 4259-63
RF Switch IC General Purpose SPDT 3 GHz 50Ohm SC-70-6; Manufacturer: pSemi; Manufacturer Part Number: 4259-63; Supplier: DigiKey; Supplier Part Number: 1046-1011-2-ND; Case/Package: SC-70-6
pins: 1 RF1, 2 GND, 3 RF2, 4 CTRL, 5 RFC, 6 VDD

## IC_AHT20
designator U?, comment AHT20
Temperature and Humidity sensor; Manufacturer: Aosong (Guangzhou) Elec; Manufacturer Part Number: AHT20; Supplier: LCSC; Supplier Part Number: C2757850
footprint DFN100P300X300x100-6N
pins: 2 VDD, 3 SCL, 4 SDA, 5 GND

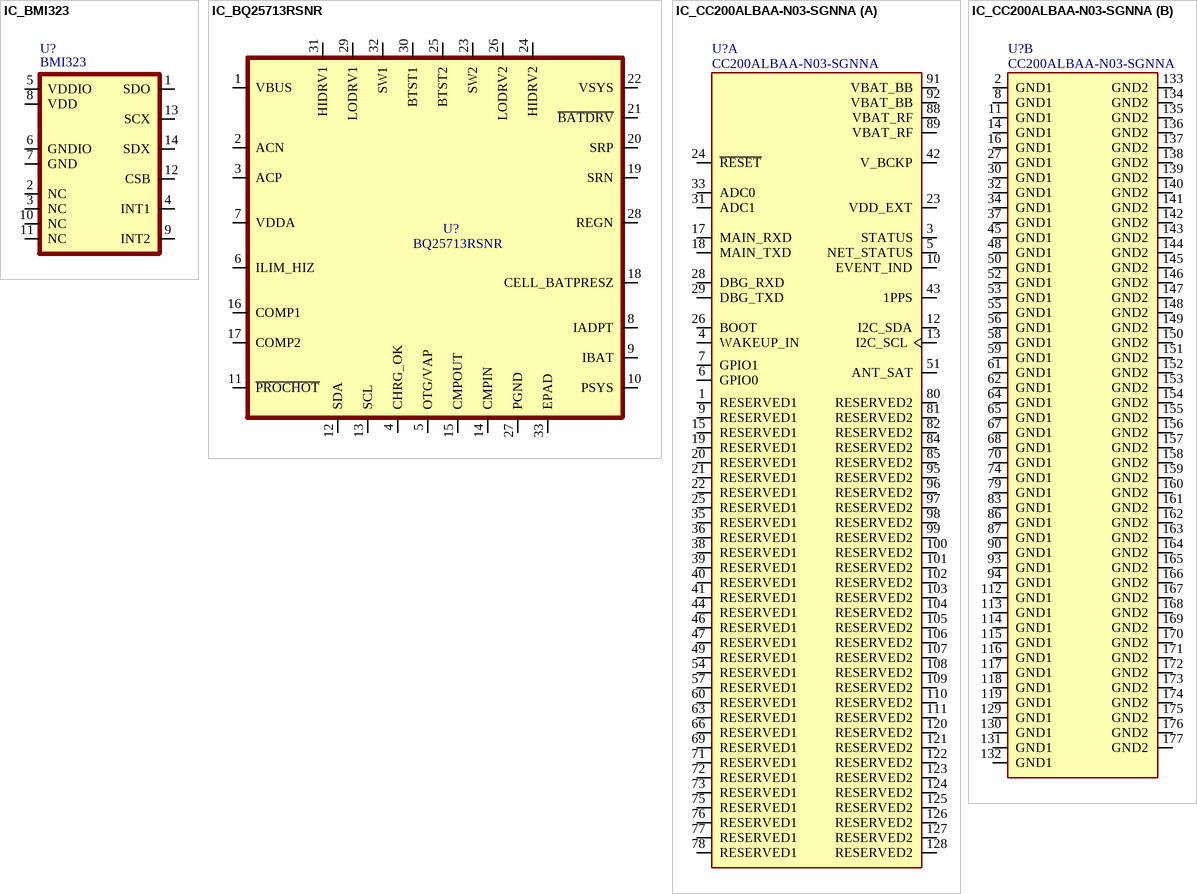
[diagram p3: symbols IC_BMI323 to IC_CC200ALBAA-N03-SGNNA]

## IC_BMI323
designator U?, comment BMI323
Accelerometer, Gyroscope, 6 Axis Sensor I2C, I3C, SPI Output; Manufacturer: Bosch Sensortec; Manufacturer Part Number: BMI323; Supplier: Digikey; Supplier Part Number: 828-BMI323TR-ND; Case/Package: 14LGA
pins: 1 SDO, 2 NC, 3 NC, 4 INT1, 5 VDDIO, 6 GNDIO, 7 GND, 8 VDD, 9 INT2, 10 NC, 11 NC, 12 CSB, 13 SCX, 14 SDX

## IC_BQ25713RSNR
designator U?, comment BQ25713RSNR
Battery Battery Monitor IC Multi-Chemistry 32-QFN (4x4); Manufacturer: Texas Instruments; Manufacturer Part Number: BQ25713RSNR; Supplier: Digikey; Supplier Part Number: 296-50953-2-ND; Case/Package: 32WQFN
footprint QFN40P400X400X80-33N
pins: 1 VBUS, 2 ACN, 3 ACP, 4 CHRG_OK, 5 OTG/VAP, 6 ILIM_HIZ, 7 VDDA, 8 IADPT, 9 IBAT, 10 PSYS, 11 ~{PROCHOT}, 12 SDA, 13 SCL, 14 CMPIN, 15 CMPOUT, 16 COMP1, 17 COMP2, 18 CELL_BATPRESZ, 19 SRN, 20 SRP, 21 ~{BATDRV}, 22 VSYS, 23 SW2, 24 HIDRV2, 25 BTST2, 26 LODRV2, 27 PGND, 28 REGN, 29 LODRV1, 30 BTST1, 31 HIDRV1, 32 SW1, 33 EPAD

## IC_CC200ALBAA-N03-SGNNA
designator U?, comment CC200ALBAA-N03-SGNNA
RF Modules ORBCOMM RFIC, Inmarsat GEO L-Band Satellite Communication Module, IsatData Pro + GNSS (PRE-ENGINEERING SAMPLE); Manufacturer: Quectel; Manufacturer Part Number: CC200ALBAA-N03-SGNNA; Supplier: Digikey; Supplier Part Number: 2958-CC200ALBAA-N03-SGNNATR-ND; Case/Package: 177-BLGA
footprint XCVR_CC200ALBAA-N03-SGNNA
part A pins: 1 RESERVED1, 3 STATUS, 4 WAKEUP_IN, 5 NET_STATUS, 6 GPIO0, 7 GPIO1, 9 RESERVED1, 10 EVENT_IND, 12 I2C_SDA, 13 I2C_SCL, 15 RESERVED1, 17 MAIN_RXD, 18 MAIN_TXD, 19 RESERVED1, 20 RESERVED1, 21 RESERVED1, 22 RESERVED1, 23 VDD_EXT, 24 ~{RESET}, 25 RESERVED1, 26 BOOT, 28 DBG_RXD, 29 DBG_TXD, 31 ADC1, 33 ADC0, 35 RESERVED1, 36 RESERVED1, 38 RESERVED1, 39 RESERVED1, 40 RESERVED1, 41 RESERVED1, 42 V_BCKP, 43 1PPS, 44 RESERVED1, 46 RESERVED1, 47 RESERVED1, 49 RESERVED1, 51 ANT_SAT, 54 RESERVED1, 57 RESERVED1, 60 RESERVED1, 63 RESERVED1, 66 RESERVED1, 69 RESERVED1, 71 RESERVED1, 72 RESERVED1, 73 RESERVED1, 75 RESERVED1, 76 RESERVED1, 77 RESERVED1, 78 RESERVED1, 80 RESERVED2, 81 RESERVED2, 82 RESERVED2, 84 RESERVED2, 85 RESERVED2, 88 VBAT_RF, 89 VBAT_RF, 91 VBAT_BB, 92 VBAT_BB, 95 RESERVED2, 96 RESERVED2, 97 RESERVED2, 98 RESERVED2, 99 RESERVED2, 100 RESERVED2, 101 RESERVED2, 102 RESERVED2, 103 RESERVED2, 104 RESERVED2, 105 RESERVED2, 106 RESERVED2, 107 RESERVED2, 108 RESERVED2, 109 RESERVED2, 110 RESERVED2, 111 RESERVED2, 120 RESERVED2, 121 RESERVED2, 122 RESERVED2, 123 RESERVED2, 124 RESERVED2, 125 RESERVED2, 126 RESERVED2, 127 RESERVED2, 128 RESERVED2
part B pins: 2 GND1, 8 GND1, 11 GND1, 14 GND1, 16 GND1, 27 GND1, 30 GND1, 32 GND1, 34 GND1, 37 GND1, 45 GND1, 48 GND1, 50 GND1, 52 GND1, 53 GND1, 55 GND1, 56 GND1, 58 GND1, 59 GND1, 61 GND1, 62 GND1, 64 GND1, 65 GND1, 67 GND1, 68 GND1, 70 GND1, 74 GND1, 79 GND1, 83 GND1, 86 GND1, 87 GND1, 90 GND1, 93 GND1, 94 GND1, 112 GND1, 113 GND1, 114 GND1, 115 GND1, 116 GND1, 117 GND1, 118 GND1, 119 GND1, 129 GND1, 130 GND1, 131 GND1, 132 GND1, 133 GND2, 134 GND2, 135 GND2, 136 GND2, 137 GND2, 138 GND2, 139 GND2, 140 GND2, 141 GND2, 142 GND2, 143 GND2, 144 GND2, 145 GND2, 146 GND2, 147 GND2, 148 GND2, 149 GND2, 150 GND2, 151 GND2, 152 GND2, 153 GND2, 154 GND2, 155 GND2, 156 GND2, 157 GND2, 158 GND2, 159 GND2, 160 GND2, 161 GND2, 162 GND2, 163 GND2, 164 GND2, 165 GND2, 166 GND2, 167 GND2, 168 GND2, 169 GND2, 170 GND2, 171 GND2, 172 GND2, 173 GND2, 174 GND2, 175 GND2, 176 GND2, 177 GND2

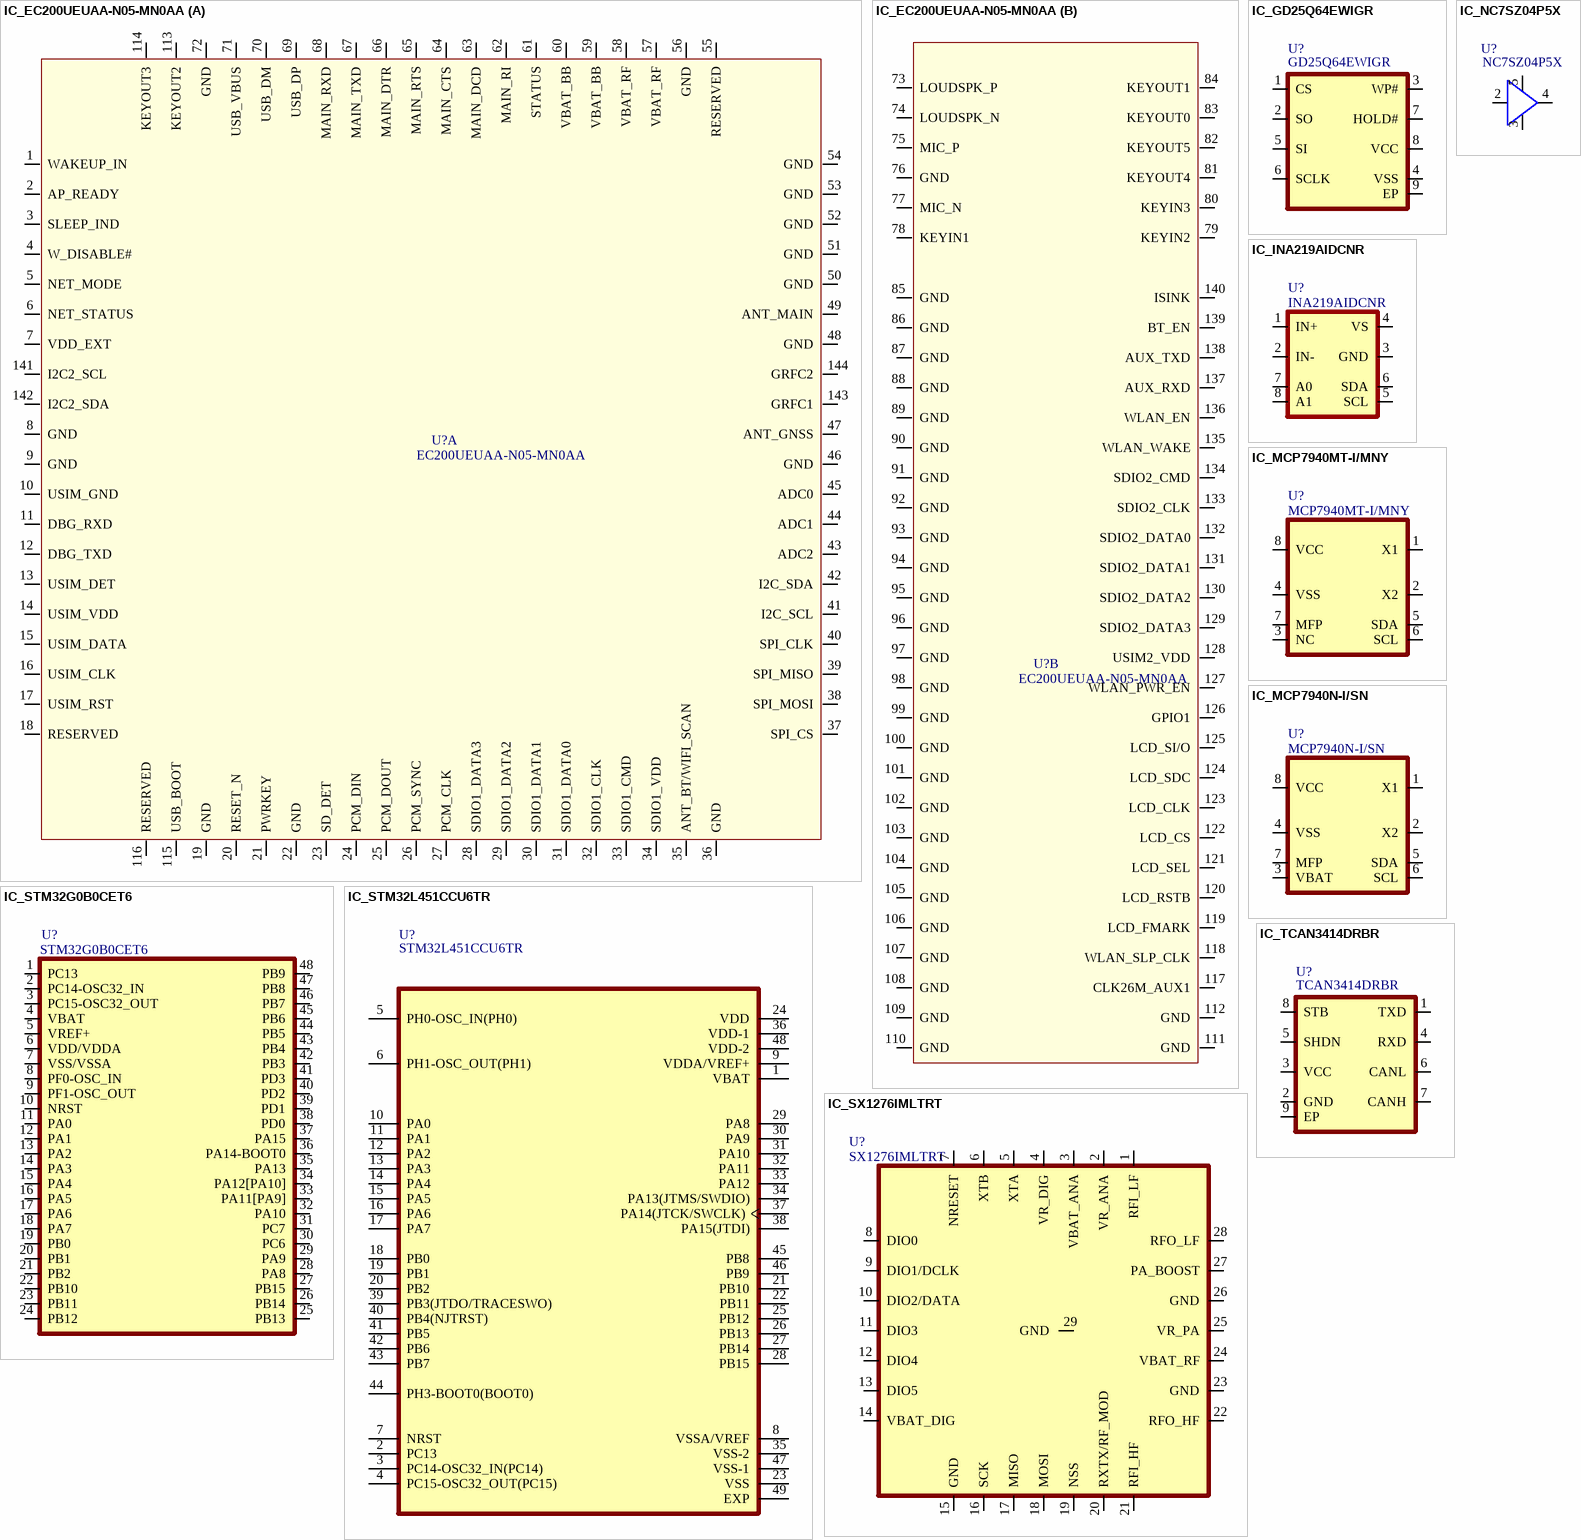
[diagram p4: symbols IC_EC200UEUAA-N05-MN0AA to IC_TCAN3414DRBR]

## IC_EC200UEUAA-N05-MN0AA
designator U?, comment EC200UEUAA-N05-MN0AA
CAT 1 + 2G, 8M, W/ GNSS, W/ BT4.; Manufacturer: Quectel; Manufacturer Part Number: EC200UEUAA-N05-MN0AA; Supplier: Digikey; Supplier Part Number: 2958-EC200UEUAA-N05-MN0AA-ND; Case/Package: *
part A pins: 1 WAKEUP_IN, 2 AP_READY, 3 SLEEP_IND, 4 W_DISABLE#, 5 NET_MODE, 6 NET_STATUS, 7 VDD_EXT, 8 GND, 9 GND, 10 USIM_GND, 11 DBG_RXD, 12 DBG_TXD, 13 USIM_DET, 14 USIM_VDD, 15 USIM_DATA, 16 USIM_CLK, 17 USIM_RST, 18 RESERVED, 19 GND, 20 RESET_N, 21 PWRKEY, 22 GND, 23 SD_DET, 24 PCM_DIN, 25 PCM_DOUT, 26 PCM_SYNC, 27 PCM_CLK, 28 SDIO1_DATA3, 29 SDIO1_DATA2, 30 SDIO1_DATA1, 31 SDIO1_DATA0, 32 SDIO1_CLK, 33 SDIO1_CMD, 34 SDIO1_VDD, 35 ANT_BT/WIFI_SCAN, 36 GND, 37 SPI_CS, 38 SPI_MOSI, 39 SPI_MISO, 40 SPI_CLK, 41 I2C_SCL, 42 I2C_SDA, 43 ADC2, 44 ADC1, 45 ADC0, 46 GND, 47 ANT_GNSS, 48 GND, 49 ANT_MAIN, 50 GND, 51 GND, 52 GND, 53 GND, 54 GND, 55 RESERVED, 56 GND, 57 VBAT_RF, 58 VBAT_RF, 59 VBAT_BB, 60 VBAT_BB, 61 STATUS, 62 MAIN_RI, 63 MAIN_DCD, 64 MAIN_CTS, 65 MAIN_RTS, 66 MAIN_DTR, 67 MAIN_TXD, 68 MAIN_RXD, 69 USB_DP, 70 USB_DM, 71 USB_VBUS, 72 GND, 113 KEYOUT2, 114 KEYOUT3, 115 USB_BOOT, 116 RESERVED, 141 I2C2_SCL, 142 I2C2_SDA, 143 GRFC1, 144 GRFC2
part B pins: 73 LOUDSPK_P, 74 LOUDSPK_N, 75 MIC_P, 76 GND, 77 MIC_N, 78 KEYIN1, 79 KEYIN2, 80 KEYIN3, 81 KEYOUT4, 82 KEYOUT5, 83 KEYOUT0, 84 KEYOUT1, 85 GND, 86 GND, 87 GND, 88 GND, 89 GND, 90 GND, 91 GND, 92 GND, 93 GND, 94 GND, 95 GND, 96 GND, 97 GND, 98 GND, 99 GND, 100 GND, 101 GND, 102 GND, 103 GND, 104 GND, 105 GND, 106 GND, 107 GND, 108 GND, 109 GND, 110 GND, 111 GND, 112 GND, 117 CLK26M_AUX1, 118 WLAN_SLP_CLK, 119 LCD_FMARK, 120 LCD_RSTB, 121 LCD_SEL, 122 LCD_CS, 123 LCD_CLK, 124 LCD_SDC, 125 LCD_SI/O, 126 GPIO1, 127 WLAN_PWR_EN, 128 USIM2_VDD, 129 SDIO2_DATA3, 130 SDIO2_DATA2, 131 SDIO2_DATA1, 132 SDIO2_DATA0, 133 SDIO2_CLK, 134 SDIO2_CMD, 135 WLAN_WAKE, 136 WLAN_EN, 137 AUX_RXD, 138 AUX_TXD, 139 BT_EN, 140 ISINK
2 alternate drawings of the same symbol

## IC_GD25Q64EWIGR
designator U?, comment GD25Q64EWIGR
IC FLASH 64MBIT SPI/QUAD 8WSON; Manufacturer: Gigadevice Electronics Singapore PTE.LTD.; Manufacturer Part Number: GD25Q64EWIGR; Supplier: Digikey; Supplier Part Number: 1970-GD25Q64EWIGRTR-ND; Case/Package: 8WSON
footprint VREG_RT8070ZQW
pins: 1 CS, 2 SO, 3 WP#, 4 VSS, 5 SI, 6 SCLK, 7 HOLD#, 8 VCC, 9 EP

## IC_INA219AIDCNR
designator U?, comment INA219AIDCNR
IC CURRENT MONITOR 1% SOT23-8; Manufacturer: Texas Instruments; Manufacturer Part Number: INA219AIDCNR; Supplier: DigiKey; Supplier Part Number: 296-23770-2-ND; Case/Package: SOT23-8; ComponentLink1Description: Datasheet; ComponentLink1URL: *
footprint SOT65P280X145-8N
pins: 1 IN+, 2 IN-, 3 GND, 4 VS, 5 SCL, 6 SDA, 7 A0, 8 A1

## IC_MCP7940MT-I/MNY
designator U?, comment MCP7940MT-I/MNY
Real Time Clock (RTC) IC Clock/Calendar 64B I2C, 2-Wire Serial 8-WFDFN Exposed Pad; Manufacturer: Microchip Technology; Manufacturer Part Number: MCP7940MT-I/MNY; Supplier: Digikey; Supplier Part Number: MCP7940MT-I/MNYTR-ND; Case/Package: 8-TDFN (2x3)
footprint TDFN8_2x3MC_MCH
pins: 1 X1, 2 X2, 3 NC, 4 VSS, 5 SDA, 6 SCL, 7 MFP, 8 VCC

## IC_MCP7940N-I/SN
designator U?, comment MCP7940N-I/SN
Real Time Clock (RTC) IC Clock/Calendar 64B I2C, 2-Wire Serial 8-SOIC (0.154", 3.90mm Width); Manufacturer: Microchip Technology; Manufacturer Part Number: MCP7940N-I/SN; Supplier: Digikey; Supplier Part Number: MCP7940N-I/SN-ND; Case/Package: 8SOIC
footprint SOIC127P600X175-8N
pins: 1 X1, 2 X2, 3 VBAT, 4 VSS, 5 SDA, 6 SCL, 7 MFP, 8 VCC

## IC_NC7SZ04P5X
designator U?, comment NC7SZ04P5X
Inverter IC 1 Channel SC-70-5; Manufacturer: onsemi; Manufacturer Part Number: NC7SZ04P5X; Supplier: DigiKey; Supplier Part Number: NC7SZ04P5XTR-ND; Case/Package: SC-70-5
pins: 2 A, 3 GND, 4 Y, 5 VCC

## IC_STM32G0B0CET6
designator U?, comment STM32G0B0CET6
512KB 2V~3.6V ARM-MSeries 64MHz 43 LQFP-48(7x7) Microcontroller Units (MCUs/MPUs/SOCs) ROHS; Manufacturer: STMicroelectronics; Manufacturer Part Number: STM32G0B0CET6; Supplier: Digikey; Supplier Part Number: 497-STM32G0B0CET6-ND; ComponentLink1Description: Datasheet; ComponentLink1URL: file:///C:/Users/Admin/Downloads/stm32g0b0ce.pdf; Case/Package: 48LQFP
footprint QFP50P900X900X160-48N
pins: 1 PC13, 2 PC14-OSC32_IN, 3 PC15-OSC32_OUT, 4 VBAT, 5 VREF+, 6 VDD/VDDA, 7 VSS/VSSA, 8 PF0-OSC_IN, 9 PF1-OSC_OUT, 10 NRST, 11 PA0, 12 PA1, 13 PA2, 14 PA3, 15 PA4, 16 PA5, 17 PA6, 18 PA7, 19 PB0, 20 PB1, 21 PB2, 22 PB10, 23 PB11, 24 PB12, 25 PB13, 26 PB14, 27 PB15, 28 PA8, 29 PA9, 30 PC6, 31 PC7, 32 PA10, 33 PA11[PA9], 34 PA12[PA10], 35 PA13, 36 PA14-BOOT0, 37 PA15, 38 PD0, 39 PD1, 40 PD2, 41 PD3, 42 PB3, 43 PB4, 44 PB5, 45 PB6, 46 PB7, 47 PB8, 48 PB9

## IC_STM32L451CCU6TR
designator U?, comment STM32L451CCU6TR
ARM Microcontrollers - MCU Ultra-low-power FPU Arm Cortex-M4 MCU 80 MHz 256 kbytes of Flash , DFSDM; Manufacturer: STMicroelectronics; Manufacturer Part Number: STM32L451CCU6TR; Supplier: Mouser; Supplier Part Number: 511-STM32L451CCU6TR; Case/Package: QFN-48
footprint QFN50P700X700X60-49N
pins: 1 VBAT, 2 PC13, 3 PC14-OSC32_IN(PC14), 4 PC15-OSC32_OUT(PC15), 5 PH0-OSC_IN(PH0), 6 PH1-OSC_OUT(PH1), 7 NRST, 8 VSSA/VREF, 9 VDDA/VREF+, 10 PA0, 11 PA1, 12 PA2, 13 PA3, 14 PA4, 15 PA5, 16 PA6, 17 PA7, 18 PB0, 19 PB1, 20 PB2, 21 PB10, 22 PB11, 23 VSS, 24 VDD, 25 PB12, 26 PB13, 27 PB14, 28 PB15, 29 PA8, 30 PA9, 31 PA10, 32 PA11, 33 PA12, 34 PA13(JTMS/SWDIO), 35 VSS-2, 36 VDD-1, 37 PA14(JTCK/SWCLK), 38 PA15(JTDI), 39 PB3(JTDO/TRACESWO), 40 PB4(NJTRST), 41 PB5, 42 PB6, 43 PB7, 44 PH3-BOOT0(BOOT0), 45 PB8, 46 PB9, 47 VSS-1, 48 VDD-2, 49 EXP

## IC_SX1276IMLTRT
designator U?, comment SX1276IMLTRT
IC RF TxRx Only 802.15.4 LoRa™ 137MHz ~ 1.02GHz 28-VQFN Exposed Pad; Manufacturer: Semtech Corporation; Manufacturer Part Number: SX1276IMLTRT; Supplier: Digikey; Supplier Part Number: SX1276IMLTRTTR-ND; Case/Package: 28-VQFN Exposed Pad
footprint QFN65P600X600X100-29N
pins: 1 RFI_LF, 2 VR_ANA, 3 VBAT_ANA, 4 VR_DIG, 5 XTA, 6 XTB, 7 NRESET, 8 DIO0, 9 DIO1/DCLK, 10 DIO2/DATA, 11 DIO3, 12 DIO4, 13 DIO5, 14 VBAT_DIG, 15 GND, 16 SCK, 17 MISO, 18 MOSI, 19 NSS, 20 RXTX/RF_MOD, 21 RFI_HF, 22 RFO_HF, 23 GND, 24 VBAT_RF, 25 VR_PA, 26 GND, 27 PA_BOOST, 28 RFO_LF, 29 GND

## IC_TCAN3414DRBR
designator U?, comment TCAN3414DRBR
CAN Interface IC 3.3-V CAN FD transce iver with shut-down; Manufacturer: Texas Instrument; Manufacturer Part Number: TCAN3414DRBR; Supplier: Mouser; Supplier Part Number: 595-TCAN3414DRBR; Case/Package: SON-8
footprint XCVR_TCAN3414DRBR
pins: 1 TXD, 2 GND, 3 VCC, 4 RXD, 5 SHDN, 6 CANL, 7 CANH, 8 STB, 9 EP

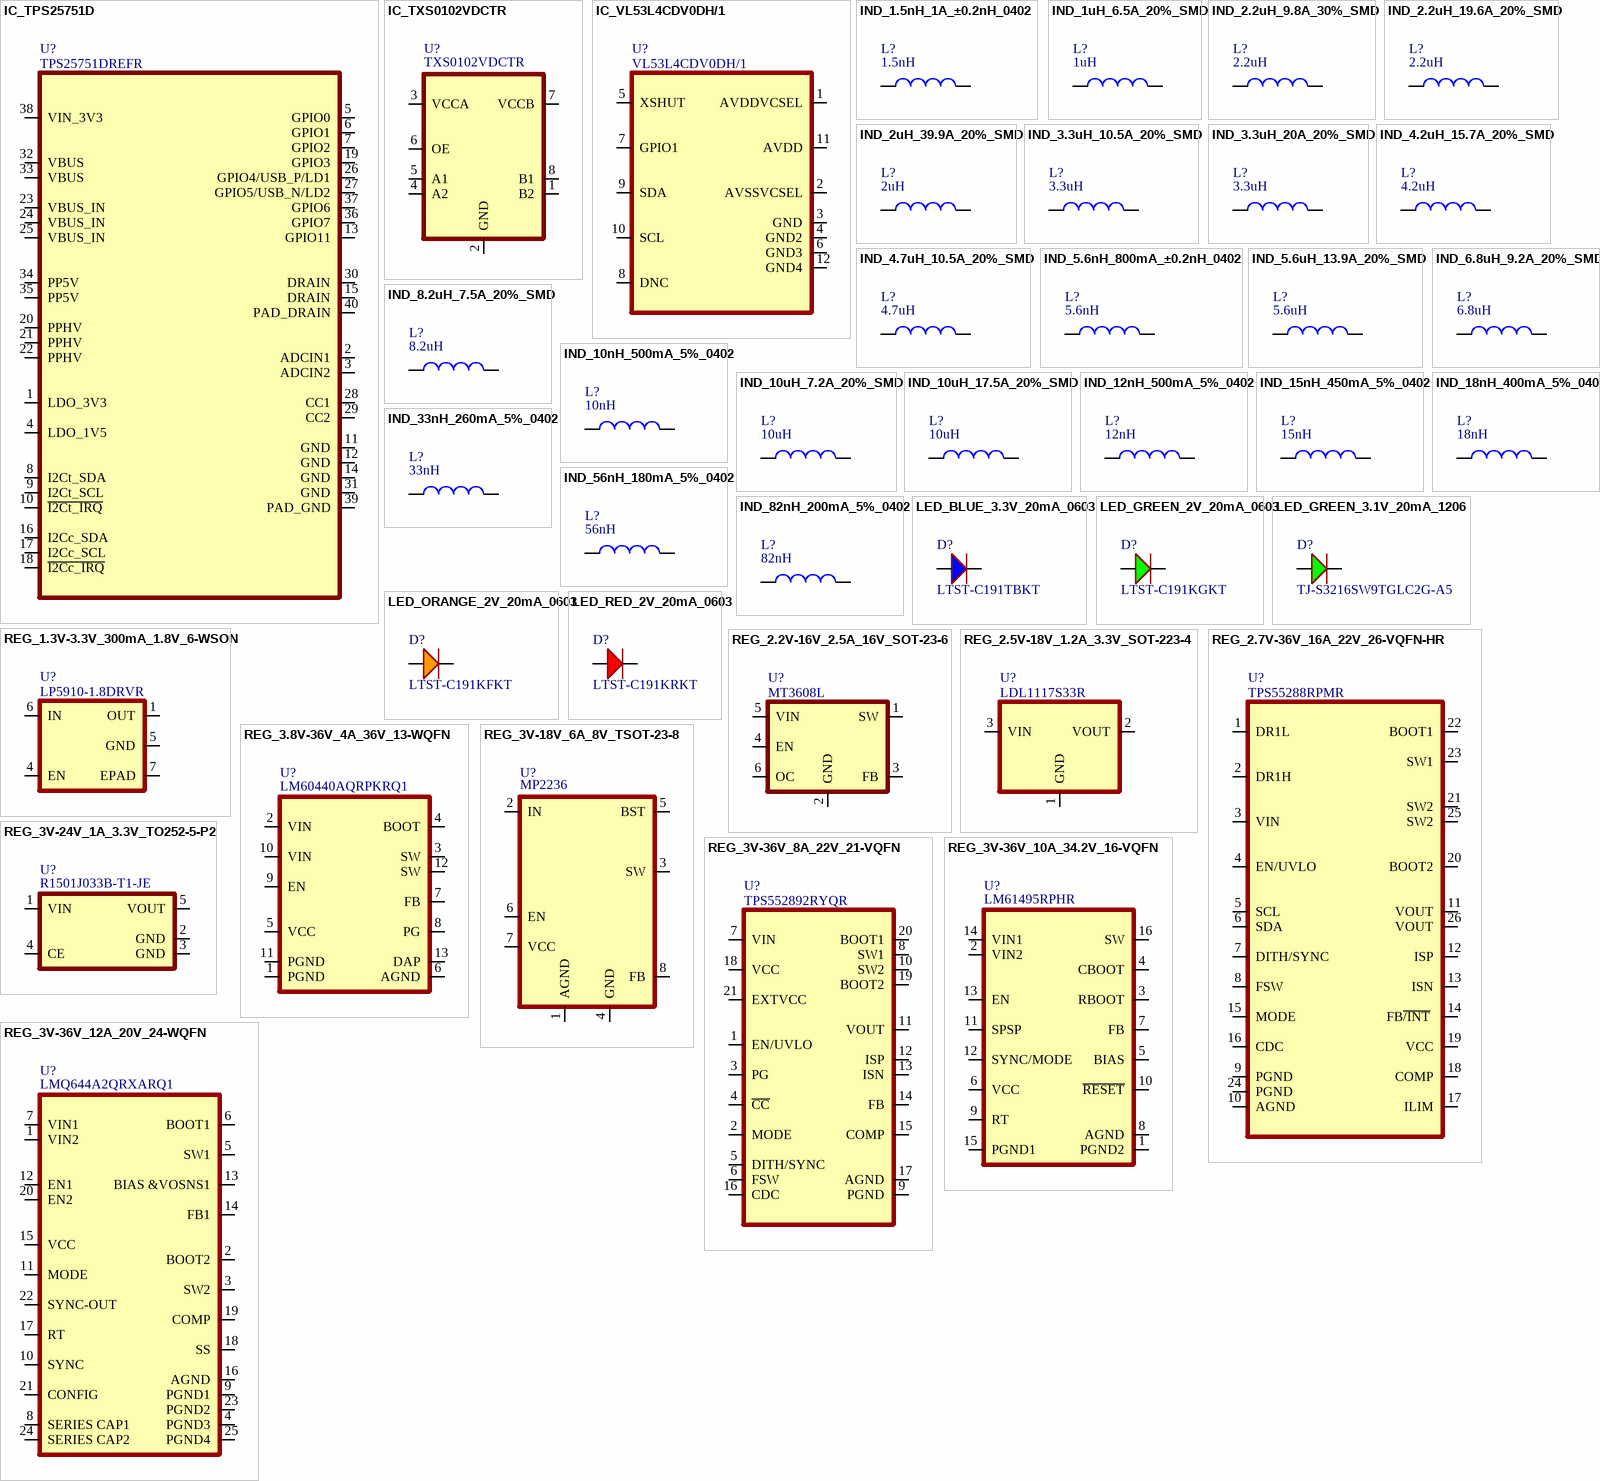
[diagram p5: symbols IC_TPS25751D to REG_3V-36V_12A_20V_24-WQFN]